# Altium schematic symbol library RK3566_.SCHLIB: 107 symbols (part 2 of 3)
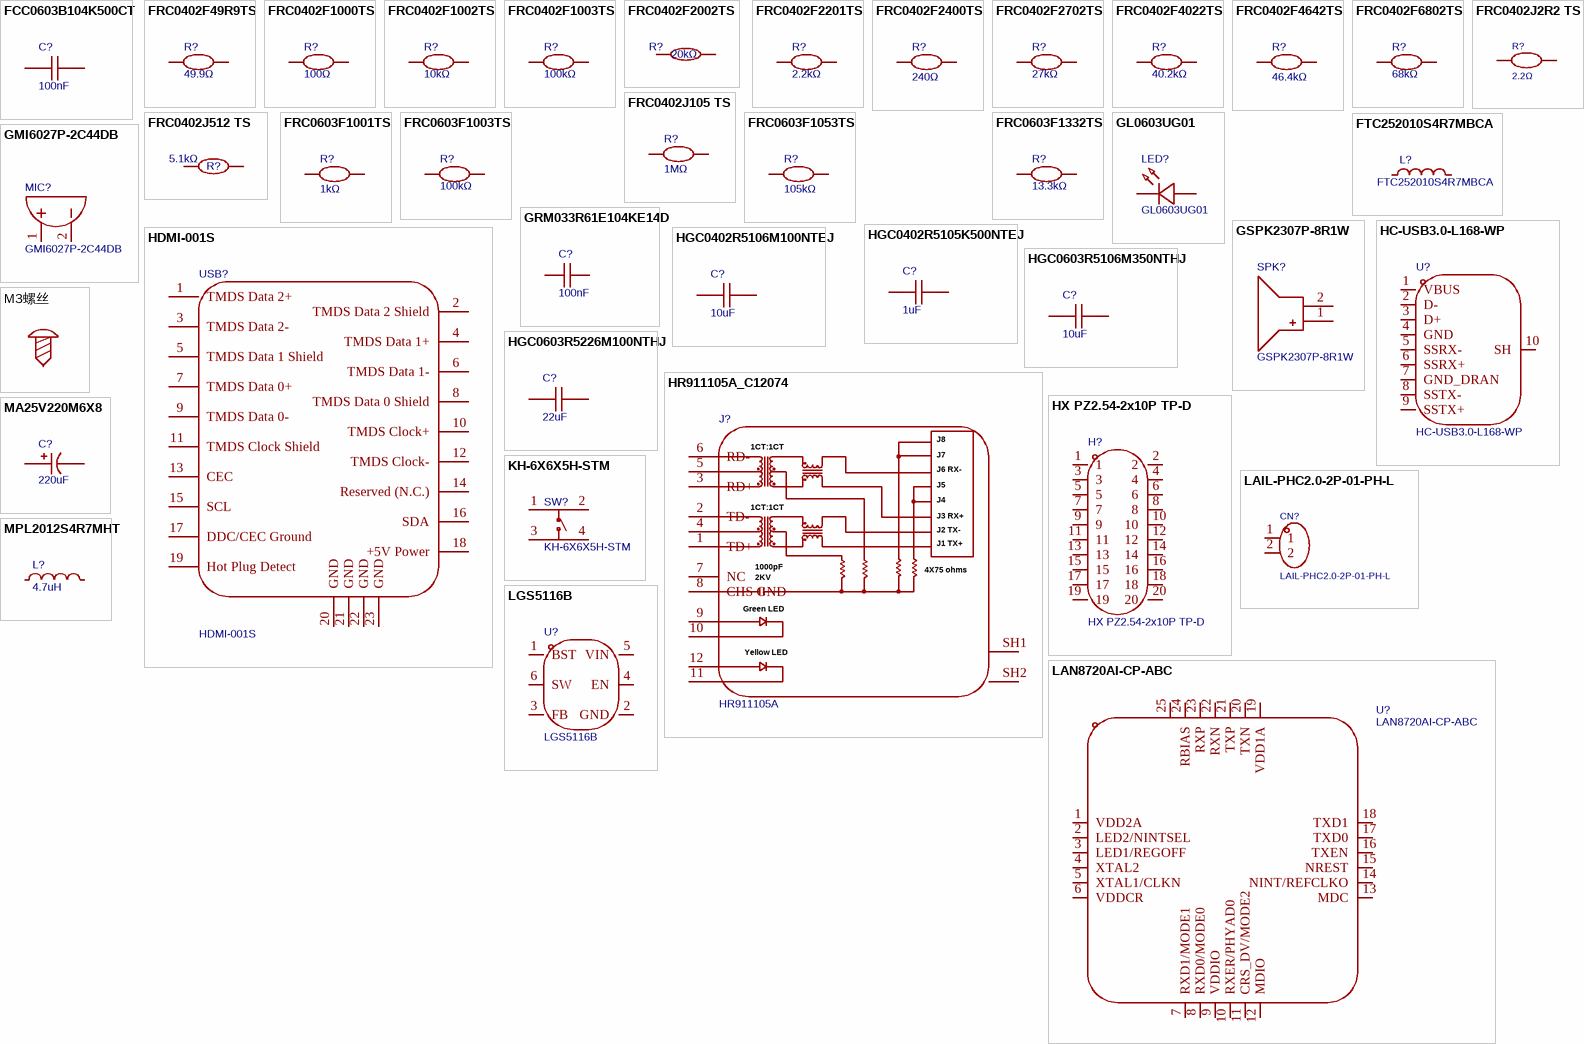
[diagram p5: symbols FCC0603B104K500CT to MPL2012S4R7MHT]

## FTC252010S4R7MBCA
designator L?
小型化一体成型T-CORE，小体积，扁线工艺，感值小; Manufacturer: cjiang(长江微电); AddInBom: yes; ModelId: e143e04106934774881cec608355723f聨0819f05c4eef4c71ace90d822a990e87; ModelName: IND-SMD_L2.5-W2.0-VLS252012CX-150M; ModelTransform: 98.504,78.819,0,0,0,0,-0.004,-0.003,0; Symbol: FTC252010S4R7MBCA; Device: FTC252010S4R7MBCA; LCSC Part Name: 4.7uH ±20% 2.6A; SupplierPart: C5832360; ManufacturerPart: FTC252010S4R7MBCA; Supplier Footprint: 1008; JLCPCB Part Class: Extended Part; Datasheet: https://item.szlcsc.com/datasheet/FTC252010S4R7MBCA/6763480.html; Supplier: LCSC; ConvertToPcb: yes; FootprintName: IND-SMD_L2.5-W2.0-VLS252012CX-150M
footprint IND-SMD_L2.5-W2.0-VLS252012CX-150M
pins: 1, 2

## GL0603UG01
designator LED?
灯头类型:-;发光颜色:翠绿色;正向压降(Vf):2.7V~3.2V;功率:-;测试电流:20mA;波长:510nm~531nm;二极管配置:独立二极管;透镜颜色:无色透明透镜;色温:-;发光强度:173mcd~350mcd;发光角度:120°;载带方式:正贴;工作温度:-40℃~+85℃;; Manufacturer: Guiguang light(桂光光电); AddInBom: yes; ModelId: 1f0d29a91be547639d425604e9b96ebb聨0819f05c4eef4c71ace90d822a990e87; ModelName: LED0603-RD; ModelTransform: 63.7794,32.283,0,0,0,0,0,0,0; Illumination Color: 翠绿色; Test Current: 20mA; Diode Configuration: 独立二极管; Lens Color: 无色透明透镜; Viewing Angle: 120°; Symbol: GL0603UG01; Device: GL0603UG01; LCSC Part Name: 0603 翠绿 高亮; SupplierPart: C51933293; ManufacturerPart: GL0603UG01; Supplier Footprint: 0603; JLCPCB Part Class: Extended Part; Datasheet: https://item.szlcsc.com/datasheet/GL0603UG01/54645989.html; Supplier: LCSC; ConvertToPcb: yes; FootprintName: LED0603-RD; Lamp Holder Type: -; Voltage - Forward(Vf): 2.7V~3.2V; Power(Watts): -; Wavelength - Dominant: 510nm~531nm; Peak Wavelength: -; Color Temperature: -; Luminous Intensity: 173mcd~350mcd; Mounting Style: 正贴; Operating Temperature: -40℃~+85℃
footprint LED0603-RD
pins: 1 K, 2 A

## GMI6027P-2C44DB
designator MIC?
指向性:全指向;输出阻抗:2.2kΩ;信噪比:58dB;灵敏度:-44dB;; Manufacturer: INGHAi(赢海); AddInBom: yes; ModelId: 14beca5542da4211ac0cab0f488bdd66聨0819f05c4eef4c71ace90d822a990e87; ModelName: MIC-TH_BD6.0-P1.90-D0.4-L; ModelTransform: 236.22,236.218,0,0,0,0,0,35.43,-118.11; Voltage - Supply: 2V; Current - Supply: 500uA; Direction: 全指向; Output Impedance: 2.2kΩ; S/N Ratio: 58dB; Sensitivity: -44dB; Frequency Range: 100Hz~10000Hz; Symbol: GMI6027P-2C44DB; Device: GMI6027P-2C44DB; LCSC Part Name: 全指向双电容φ6.0*2.7mm 1.5V-10V 灵敏度-44db 低阻抗 针脚; SupplierPart: C233905; ManufacturerPart: GMI6027P-2C44DB; Supplier Footprint: 插件,D=6mm; JLCPCB Part Class: Extended Part; Datasheet: https://item.szlcsc.com/datasheet/GMI6027P-2C44DB/233687.html; Supplier: LCSC; ConvertToPcb: yes; FootprintName: MIC-TH_BD6.0-P1.90-D0.4-L; Diameter(φD): 6mm; Height: 2.7mm; Operating Temperature: -20℃~+60℃; Mounting Type: 插件; Lead Pitch: -
footprint MIC-TH_BD6.0-P1.90-D0.4-L
pins: 1, 2

## GRM033R61E104KE14D
designator C?, comment 100nF
容值:100nF;精度:±10%;额定电压:25V;温度系数:X5R;; Manufacturer: muRata(村田); Symbol: GRM033R61E104KE14D; AddInBom: yes; ModelId: e8033a7cb35143ffb28e3b81b2577ea0聨0819f05c4eef4c71ace90d822a990e87; ModelName: C0201_L0.6-W0.3-H0.3; ModelTransform: 23.622,11.811,0,0,0,0,0,0,0; Tolerance: ±10%; Voltage Rating: 25V; Temperature Coefficient: X5R; Device: GRM033R61E104KE14D; LCSC Part Name: 100nF ±10% 25V; SupplierPart: C76939; ManufacturerPart: GRM033R61E104KE14D; Supplier Footprint: 0201; JLCPCB Part Class: Extended Part; Datasheet: https://item.szlcsc.com/datasheet/GRM033R61E104KE14D/78066.html; Supplier: LCSC; ConvertToPcb: yes; FootprintName: C0201; Value: 100nF
footprint C0201
pins: 1, 2

## GSPK2307P-8R1W
designator SPK?
构造类型:电磁式;阻抗:8Ω;谐振频率:1.7kHz;失真(THD):5%;额定功率:500mW;声压(SPL):88dB;; Manufacturer: INGHAi(赢海); AddInBom: yes; ModelId: ab55928af2af4572b770ceb6505e1bd0聨0819f05c4eef4c71ace90d822a990e87; ModelName: SPK-TH_BD23.0-P10.00-D0.8-L-RD; ModelTransform: 905.51,905.51,0,0,0,0,0.157,0,-236.22; Impedance: 8Ω; Resonant Frequency: 1.7kHz; Total Harmonic Distortion(THD): 5%; Rated Power: 500mW; Sound Pressure Level(SPL): 88dB; Max Power: 1W; Symbol: GSPK2307P-8R1W; Device: GSPK2307P-8R1W; LCSC Part Name: 23mm 8Ω; SupplierPart: C530531; ManufacturerPart: GSPK2307P-8R1W; Supplier Footprint: -; JLCPCB Part Class: Extended Part; Datasheet: https://item.szlcsc.com/datasheet/GSPK2307P-8R1W/550865.html; Supplier: LCSC; ConvertToPcb: yes; FootprintName: SPK-TH_BD23.0-P10.00-D0.8-L-RD; Technology: 电磁式; Frequency Range: -; Diameter(φD): 23mm; Length: -; Width: -; Height: 6.8mm; Operating Temperature: -40℃~+85℃; Mounting Type: -; Lead Pitch: -
footprint SPK-TH_BD23.0-P10.00-D0.8-L-RD
pins: 1 +, 2 -

## HC-USB3.0-L168-WP
designator U?
连接器类型:Type-A;协议标准:USB 3.0;公母:母;安装方式:弯插;触点数量:9P;端口数量:1;额定电流 - 电源:1.5A;工作温度:-25℃~+70℃;; Manufacturer: HC(虹成电子); AddInBom: yes; ModelId: a6994728bee34198bb5c5e1920a86239聨0819f05c4eef4c71ace90d822a990e87; ModelName: USB-TH_USB3.0-A; ModelTransform: 614.14546,661.41998,0,0,0,0,-0.001,-204.724,-137.795; Connector Type: Type-A; Protocol Standard: USB 3.0; Gender: 母; Number of Contacts: 9P; Number of Ports: 1; Current Rating-Power: 1.5A; Voltage Rating: 30V; Connect-Disconnect Life: 1.5千次; Detection color: 蓝色; Symbol: HC-USB3.0-L168-WP; Device: HC-USB3.0-L168-WP; LCSC Part Name: Type-A 母 弯插 USB3.0 A母90度 弯脚蓝色平口 吸塑盒; SupplierPart: C7501850; ManufacturerPart: HC-USB3.0-L168-WP; Supplier Footprint: 弯插; JLCPCB Part Class: Extended Part; Datasheet: https://item.szlcsc.com/datasheet/HC-USB3.0-L168-WP/8585391.html; Supplier: LCSC; ConvertToPcb: yes; FootprintName: USB-TH_USB3.0-A; Mounting Type: 弯插; Supplementary Features: -; Center Height: -; Length: 16.8mm; Operating Temperature: -25℃~+70℃
footprint USB-TH_USB3.0-A
pins: 1 VBUS, 2 D-, 3 D+, 4 GND, 5 SSRX-, 6 SSRX+, 7 GND_DRAN, 8 SSTX-, 9 SSTX+, 10 SH

## HDMI-001S
designator USB?
19PIN A型前插后贴HDMI插座 铜壳; Manufacturer: XUNPU(讯普); AddInBom: yes; ModelId: 95350f9f774e4f059b8c605506db97f9聨0819f05c4eef4c71ace90d822a990e87; ModelName: HDMI-SMD_HDMI-001S; ModelTransform: 590.5878,468.503,0,0,0,0,0,-79.567,-85.039; Connector Type: HDMI-A; Gender: 母; Symbol: HDMI-001S; Device: HDMI-001S; LCSC Part Name: HDMI-A 母 19P; SupplierPart: C720616; ManufacturerPart: HDMI-001S; Supplier Footprint: SMD; JLCPCB Part Class: Extended Part; Datasheet: https://item.szlcsc.com/datasheet/HDMI-001S/763623.html; Supplier: LCSC; ConvertToPcb: yes; FootprintName: HDMI-SMD_HDMI-001S; Number of Pins: 19P; Mounting Type: 卧贴; Current Rating: -; Voltage Rating: -; Operating Temperature: -
footprint HDMI-SMD_HDMI-001S
pins: 1 TMDS Data 2+, 2 TMDS Data 2 Shield, 3 TMDS Data 2-, 4 TMDS Data 1+, 5 TMDS Data 1 Shield, 6 TMDS Data 1-, 7 TMDS Data 0+, 8 TMDS Data 0 Shield, 9 TMDS Data 0-, 10 TMDS Clock+, 11 TMDS Clock Shield, 12 TMDS Clock-, 13 CEC, 14 Reserved (N.C.), 15 SCL, 16 SDA, 17 DDC/CEC Ground, 18 +5V Power, 19 Hot Plug Detect, 20 GND, 21 GND, 22 GND, 23 GND

## HGC0402R5105K500NTEJ
designator C?, comment 1uF
容值:1uF;精度:±10%;额定电压:50V;温度系数:X5R;; Manufacturer: Chinocera(华瓷); Symbol: HGC0402R5105K500NTEJ; 3D Model: 36a51122f27c49738f86b3bfa98863e0聨0819f05c4eef4c71ace90d822a990e87; 3D Model Transform: 39.37,19.685,0,0,0,0,0,0,0; Tolerance: ±10%; Voltage Rating: 50V; Temperature Coefficient: X5R; AddInBom: yes; ModelName: C0402_L1.0-W0.5-H0.5; Device: HGC0402R5105K500NTEJ; LCSC Part Name: 1uF ±10% 50V; Supplier Part: C7472948; Manufacturer Part: HGC0402R5105K500NTEJ; Supplier Footprint: 0402; JLCPCB Part Class: Extended Part; Datasheet: https://item.szlcsc.com/datasheet/HGC0402R5105K500NTEJ/8532795.html; Supplier: LCSC; Value: 1uF; ConvertToPcb: yes; FootprintName: C0402
footprint C0402
3D model C0402_L1.0-W0.5-H0.5
pins: 1, 2

## HGC0402R5106M100NTEJ
designator C?, comment 10uF
容值:10uF;精度:±20%;额定电压:10V;温度系数:X5R;; Manufacturer: Chinocera(华瓷); Symbol: HGC0402R5106M100NTEJ; 3D Model: 36a51122f27c49738f86b3bfa98863e0聨0819f05c4eef4c71ace90d822a990e87; 3D Model Transform: 39.37,19.685,0,0,0,0,0,0,0; Tolerance: ±20%; Voltage Rating: 10V; Temperature Coefficient: X5R; AddInBom: yes; ModelName: C0402_L1.0-W0.5-H0.5; Device: HGC0402R5106M100NTEJ; LCSC Part Name: 10uF ±20% 10V; Supplier Part: C7472949; Manufacturer Part: HGC0402R5106M100NTEJ; Supplier Footprint: 0402; JLCPCB Part Class: Extended Part; Datasheet: https://item.szlcsc.com/datasheet/HGC0402R5106M100NTEJ/8532796.html; Supplier: LCSC; Value: 10uF; ConvertToPcb: yes; FootprintName: C0402
footprint C0402
3D model C0402_L1.0-W0.5-H0.5
pins: 1, 2

## HGC0603R5106M350NTHJ
designator C?, comment 10uF
容值:10uF;精度:±20%;额定电压:35V;温度系数:X5R;; Manufacturer: Chinocera(华瓷); Symbol: HGC0603R5106M350NTHJ; AddInBom: yes; ModelId: ac125912035d415993ca9572d50418b1聨0819f05c4eef4c71ace90d822a990e87; ModelName: C0603_L1.6-W0.8-H0.8; ModelTransform: 62.992,31.496,0,0,0,0,0,0,0; Tolerance: ±20%; Voltage Rating: 35V; Temperature Coefficient: X5R; Device: HGC0603R5106M350NTHJ; LCSC Part Name: 10uF ±20% 35V; SupplierPart: C22367827; ManufacturerPart: HGC0603R5106M350NTHJ; Supplier Footprint: 0603; JLCPCB Part Class: Extended Part; Datasheet: https://item.szlcsc.com/datasheet/HGC0603R5106M350NTHJ/23841132.html; Supplier: LCSC; ConvertToPcb: yes; FootprintName: C0603; Value: 10uF
footprint C0603
pins: 1, 2

## HGC0603R5226M100NTHJ
designator C?, comment 22uF
容值:22uF;精度:±20%;额定电压:10V;温度系数:X5R;; Manufacturer: Chinocera(华瓷); Symbol: HGC0603R5226M100NTHJ; 3D Model: ac125912035d415993ca9572d50418b1聨0819f05c4eef4c71ace90d822a990e87; 3D Model Transform: 62.992,31.496,0,0,0,0,0,0,0; Tolerance: ±20%; Voltage Rating: 10V; Temperature Coefficient: X5R; AddInBom: yes; ModelName: C0603_L1.6-W0.8-H0.8; Device: HGC0603R5226M100NTHJ; LCSC Part Name: 22uF ±20% 10V; Supplier Part: C7432770; Manufacturer Part: HGC0603R5226M100NTHJ; Supplier Footprint: 0603; JLCPCB Part Class: Extended Part; Datasheet: https://item.szlcsc.com/datasheet/HGC0603R5226M100NTHJ/8438252.html; Supplier: LCSC; Value: 22uF; ConvertToPcb: yes; FootprintName: C0603
footprint C0603
3D model C0603_L1.6-W0.8-H0.8
pins: 1, 2

## HR911105A_C12074
designator J?, comment HR911105A
连接器类型:RJ45插座;安装方式:弯插;端口数量:1;LED:带LED;屏蔽:有屏蔽;等级:-;触头材质:磷青铜;触头镀层:金;工作温度:0℃~+70℃;; Manufacturer: HANRUN(汉仁); Symbol: HR911105A_C12074; AddInBom: yes; ModelId: 269ece015cf14129b359f9a66aa2dc0d聨0819f05c4eef4c71ace90d822a990e87; ModelName: RJ45-TH_HR911105A; ModelTransform: 624.711,850.392,0,0,0,0,0,-89.567,-129.921; Connector Type: RJ45插座; Number of Ports: 1; LED: 带LED; Shielding: 有屏蔽; PoE: 不带PoE; Supplementary Features: 带滤波; Device: HR911105A_C12074; LCSC Part Name: 弯插 带LED; SupplierPart: C12074; ManufacturerPart: HR911105A; Supplier Footprint: 插件; JLCPCB Part Class: Extended Part; Datasheet: https://item.szlcsc.com/datasheet/HR911105A/12651.html; Supplier: LCSC; ConvertToPcb: yes; FootprintName: RJ45-TH_HR911105A; Mounting Type: 弯插; Ratings: -; Contact Material: 磷青铜; Contact Plating: 金; Operating Temperature: 0℃~+70℃; Length: 21.3mm; Width: 16.04mm; Height: 13.5mm
footprint RJ45-TH_HR911105A
pins: 1 TD+, 2 TD-, 3 RD+, 4, 5, 6 RD-, 7 NC, 8 CHS GND, 9, 10, 11, 12, SH1, SH2
text: J8; 1CT:1CT; J7; J6 RX-; J5; J4; J3 RX+; J2 TX-; J1 TX+; 1000pF; 4X75 ohms; 2KV; Green LED; Yellow LED

## HX PZ2.54-2x10P TP-D
designator H?
插针结构:2x10P;间距:2.54mm;行距:2.54mm;圆针/方针:方针;安装方式:立贴;排数:双排;总PIN位数:20P;额定电流:3A;额定电压:1kV;配合针长度:6mm;塑高:2.5mm;端接针长度:-;触头材质:黄铜;触头镀层:金;工作温度:-40℃~+105℃;颜色:黑色;; Manufacturer: hanxia(韩下); AddInBom: yes; ModelId: 2f2e403eed2245bd8cccf105df6707d7聨0819f05c4eef4c71ace90d822a990e87; ModelName: HDR-SMD_20P-P2.54-V-M-R2-C10-S2.54-LS7.5-EH; ModelTransform: 1000.39166,295.275,0,0,0,0,0,0,-27.559; Pin Structure: 2x10P; Pitch: 2.54mm; Circluar Pins/Square Pins: 方针; Current Rating: 3A; Voltage Rating (Max): 1kV; Symbol: HX PZ2.54-2X10P TP-D; Device: HX PZ2.54-2x10P TP-D; LCSC Part Name: 配套排母HX PM2.54-2x10P系列 2x10P 间距:2.54mm 方针 立贴; SupplierPart: C46061674; ManufacturerPart: HX PZ2.54-2x10P TP-D; Supplier Footprint: SMD,P=2.54mm; JLCPCB Part Class: Extended Part; Datasheet: https://item.szlcsc.com/datasheet/HX%2520PZ2.54-2x10P%2520TP-D/48170534.html; Supplier: LCSC; ConvertToPcb: yes; FootprintName: HDR-SMD_20P-P2.54-V-M-R2-C10-S2.54-LS7.5-EH; Row Spacing: 2.54mm; Mounting Type: 立贴; Number of Rows: 双排; Number of Pins: 20P; Length of Mating Pin: 6mm; Insulation Height: 2.5mm; Length of End Connection Pin: -; Contact Material: 黄铜; Contact Plating: 金; Operating Temperature: -40℃~+105℃; Color: 黑色; Supplementary Features: -
footprint HDR-SMD_20P-P2.54-V-M-R2-C10-S2.54-LS7.5-EH
pins: 1, 2, 3, 4, 5, 6, 7, 8, 9, 10, 11, 12, 13, 14, 15, 16, 17, 18, 19, 20

## KH-6X6X5H-STM
designator SW?
电路结构:单刀单掷;按钮形状:圆形按钮;安装方式:立贴;开关长度:6mm;开关宽度:6mm;开关高度:5mm;带支架:不带支架;触点电流:50mA;额定电压:12V;工作寿命:8万次;; Manufacturer: kinghelm(金航标); AddInBom: yes; ModelId: 46371efb35684031937580a0045530ec聨0819f05c4eef4c71ace90d822a990e87; ModelName: SW-SMD_4P-L6.0-W6.0-P4.50-LS9.0_H5.0; ModelTransform: 354.33,236.25937,0,0,0,0,0,0,0; Circuit: 单刀单掷; Actuator Style: 圆形按钮; Switch Height: 5mm; with Bracket: 不带支架; Contact Current: 50mA; Voltage Rating: 12V; Actuator/Cap Color: 黑色; Life: 8万次; Symbol: KH-6X6X5H-STM; Device: KH-6X6X5H-STM; LCSC Part Name: 6*6*5mm 立贴 轻触开关; SupplierPart: C2837531; ManufacturerPart: KH-6X6X5H-STM; Supplier Footprint: SMD-4P,6x6mm; JLCPCB Part Class: Extended Part; Datasheet: https://item.szlcsc.com/datasheet/KH-6X6X5H-STM/3009601.html; Supplier: LCSC; ConvertToPcb: yes; FootprintName: SW-SMD_4P-L6.0-W6.0-P4.50-LS9.0_H5.0; Mounting Type: 立贴; Length: 6mm; Width: 6mm; Termination Style: 鸥翼型
footprint SW-SMD_4P-L6.0-W6.0-P4.50-LS9.0_H5.0
pins: 1, 2, 3, 4

## LAIL-PHC2.0-2P-01-PH-L
designator CN?
插针结构:1x2P;间距:2mm;安装方式:直插;参考系列:PH;总PIN数:2P;排数:1;每排PIN数:2;额定电流:2A;触头材质:黄铜;触头镀层:锡;工作温度:-25℃~+85℃;; Manufacturer: LAILAN(莱联); AddInBom: yes; ModelId: 5b53f0660d4141229bca89eb4238f4a6聨0819f05c4eef4c71ace90d822a990e87; ModelName: CONN-TH_2P-P2.00_HC-PH-2A-TW; ModelTransform: 236.22,189.3697,0,180,0,0,0,25.591,-133.858; Pins Structure: 1x2P; Pitch: 2mm; Reference Series: PH; Number of PINs Per Row: 2; Current Rating: 2A; Voltage Rating: 250V; Plastic Material: PA66; Flame Retardant Rating: UL94V-0; Z-Height of the Board: 6mm; Y-Width of Bottom Edge on Board: 4.7mm; Symbol: LAIL-PHC2.0-2P-01-PH-L; Device: LAIL-PHC2.0-2P-01-PH-L; LCSC Part Name: 1x2P 间距:2mm 直插 系列:PH; SupplierPart: C54905988; ManufacturerPart: LAIL-PHC2.0-2P-01-PH-L; Supplier Footprint: 插件,P=2mm; JLCPCB Part Class: Extended Part; Datasheet: https://item.szlcsc.com/datasheet/LAIL-PHC2.0-2P-01-PH-L/58431115.html; Supplier: LCSC; ConvertToPcb: yes; FootprintName: CONN-TH_2P-P2.00_HC-PH-2A-TW; Mounting Type: 直插; Number of Pins: 2P; Number of Rows: 1; Contact Material: 黄铜; Contact Plating: 锡; Operating Temperature: -25℃~+85℃; Color: 白色; X-Length of Bottom Edge on Board (Spacing Line): 6mm
footprint CONN-TH_2P-P2.00_HC-PH-2A-TW
pins: 1, 2

## LAN8720AI-CP-ABC
designator U?
输入类型:施密特触发器;工作电压:1.6V~3.6V;元件数:-;每个元件位数:-;灌电流(IOL):12mA;拉电流(IOH):12mA;; Manufacturer: MICROCHIP(美国微芯); AddInBom: yes; ModelId: 1e6a51e223ba431598528b34e5bdfcc9聨0819f05c4eef4c71ace90d822a990e87; ModelName: QFN-24_L4.0-W4.0-H0.9-P0.50; ModelTransform: 157.48,157.48,0,90,0,0,0,0,0; Input type: 施密特触发器; Current - Output Low(IOL): 12mA; Symbol: LAN8720AI-CP-ABC; Device: LAN8720AI-CP-ABC; LCSC Part Name: 支持HP自动MDIX功能的小尺寸RMII 10/100以太网收发器; SupplierPart: C511283; ManufacturerPart: LAN8720AI-CP-ABC; Supplier Footprint: QFN-24-EP(4x4); JLCPCB Part Class: Extended Part; Datasheet: https://item.szlcsc.com/datasheet/LAN8720AI-CP-ABC/525730.html; Supplier: LCSC; ConvertToPcb: yes; FootprintName: QFN-24_L4.0-W4.0-P0.50-BL-EP2.6; output type: -; Voltage - Supply: 1.6V~3.6V; Number of Elements: -; Number of Bits per Element: -; Channel Type: -; Current - Output High(IOH): 12mA; Logic Family: LAN8720A; Operating Temperature: -40℃~+85℃; Quiescent Current: -; Propagation Delay: -; Features: -
footprint QFN-24_L4.0-W4.0-P0.50-BL-EP2.6
pins: 1 VDD2A, 2 LED2/NINTSEL, 3 LED1/REGOFF, 4 XTAL2, 5 XTAL1/CLKN, 6 VDDCR, 7 RXD1/MODE1, 8 RXD0/MODE0, 9 VDDIO, 10 RXER/PHYAD0, 11 CRS_DV/MODE2, 12 MDIO, 13 MDC, 14 NINT/REFCLKO, 15 NREST, 16 TXEN, 17 TXD0, 18 TXD1, 19 VDD1A, 20 TXN, 21 TXP, 22 RXN, 23 RXP, 24 RBIAS, 25 PAD

## LGS5116B
designator U?
功能类型:降压型;工作电压:4.5V~18V;输出电压:600mV~12V;输出电流:2A;输出类型:可调;; Manufacturer: Legend-Si(棱晶半导体); AddInBom: yes; ModelId: 18da8f6c14a34920b3e136b5c401a119聨0819f05c4eef4c71ace90d822a990e87; ModelName: SOT-23-6_L2.9-W1.6-H1.5-LS2.8-P0.95; ModelTransform: 110.73671,114.173,0,180,0,0,0.001,-0.003,0; Function: 降压型; Output Current: 2A; Frequency - Switching: 500kHz; Synchronous Rectifier: 是; Number of Outputs: 1; Topology: 降压式; Quiescent Current: 400uA; Switch tube (built-in/external): 内置; Output Type: 可调; Symbol: LGS5116B; Device: LGS5116B; LCSC Part Name: 降压型 2A 4.5V~18V; SupplierPart: C5818961; ManufacturerPart: LGS5116B; Supplier Footprint: SOT23-6; JLCPCB Part Class: Extended Part; Datasheet: https://item.szlcsc.com/datasheet/LGS5116B/6748671.html; Supplier: LCSC; ConvertToPcb: yes; FootprintName: SOT-23-6_L2.9-W1.6-P0.95-LS2.8-BR; Voltage - Supply: 4.5V~18V; Output Voltage: 600mV~12V; Operating Temperature: -40℃~+125℃@(TJ); Features: 轻载高效模式；逐波限流；过流保护
footprint SOT-23-6_L2.9-W1.6-P0.95-LS2.8-BR
pins: 1 BST, 2 GND, 3 FB, 4 EN, 5 VIN, 6 SW

## M3螺丝
designator SCREW?
Symbol: 螺丝孔; Device: M3螺丝; ConvertToPcb: yes; AddInBom: yes; Supplier Footprint: 插件; FootprintName: M3螺丝
footprint M3螺丝
pins: 1

## MA25V220M6X8
designator C?, comment 220uF
容值:220uF;精度:±20%;额定电压:25V;纹波电流:2.9A@100kHz;等效串联电阻(ESR):28mΩ@100kHz;类型:聚合物;; Manufacturer: JIERR(捷而瑞); Symbol: MA25V220M6X8; AddInBom: yes; ModelId: 697a8c63e3274188b68c96045bc3ea1c聨0819f05c4eef4c71ace90d822a990e87; ModelName: CAP-SMD_BD6.3-L6.6-W6.6-LS7.3-FD; ModelTransform: 287.401,259.842,0,180,0,0,0.001,0.001,0; Tolerance: ±20%; Voltage Rating: 25V; Type: 聚合物; Lifetime: 2000hrs@105℃; Polarity type: 有极性; Device: MA25V220M6X8; LCSC Part Name: 220uF ±20% 25V; SupplierPart: C46550464; ManufacturerPart: MA25V220M6X8; Supplier Footprint: SMD,D6.3xL7.7mm; JLCPCB Part Class: Extended Part; Datasheet: https://item.szlcsc.com/datasheet/MA25V220M6X8/48680158.html; Supplier: LCSC; ConvertToPcb: yes; FootprintName: CAP-SMD_BD6.3-L6.6-W6.6-LS7.3-FD; Value: 220uF; Ripple Current: 2.9A@100kHz; Equivalent Series Resistance(ESR): 28mΩ@100kHz; Diameter: 6.3mm; Height - Seated (Max): 7.7mm; Operating Temperature: -55℃~+105℃
footprint CAP-SMD_BD6.3-L6.6-W6.6-LS7.3-FD
pins: 1, 2

## MPL2012S4R7MHT
designator L?, comment 4.7uH
电感值:4.7uH;精度:±20%;额定电流:800mA;类型:叠层电感;; Manufacturer: Sunlord(顺络); Symbol: MPL2012S4R7MHT; AddInBom: yes; ModelId: 37a81e68749a4138bd2dfa6897b24b85聨0819f05c4eef4c71ace90d822a990e87; ModelName: R0805_L2.0-W1.3-H0.6; ModelTransform: 78.74,51.181,0,0,0,0,0,0.001,0; Tolerance: ±20%; Current Rating: 800mA; DC Resistance(DCR): 250mΩ; Type: 叠层电感; Device: MPL2012S4R7MHT; LCSC Part Name: 4.7uH ±20%; SupplierPart: C63166; ManufacturerPart: MPL2012S4R7MHT; Supplier Footprint: 0805; JLCPCB Part Class: Extended Part; Datasheet: https://item.szlcsc.com/datasheet/MPL2012S4R7MHT/64229.html; Supplier: LCSC; ConvertToPcb: yes; FootprintName: L0805; Value: 4.7uH
footprint L0805
pins: 1, 2

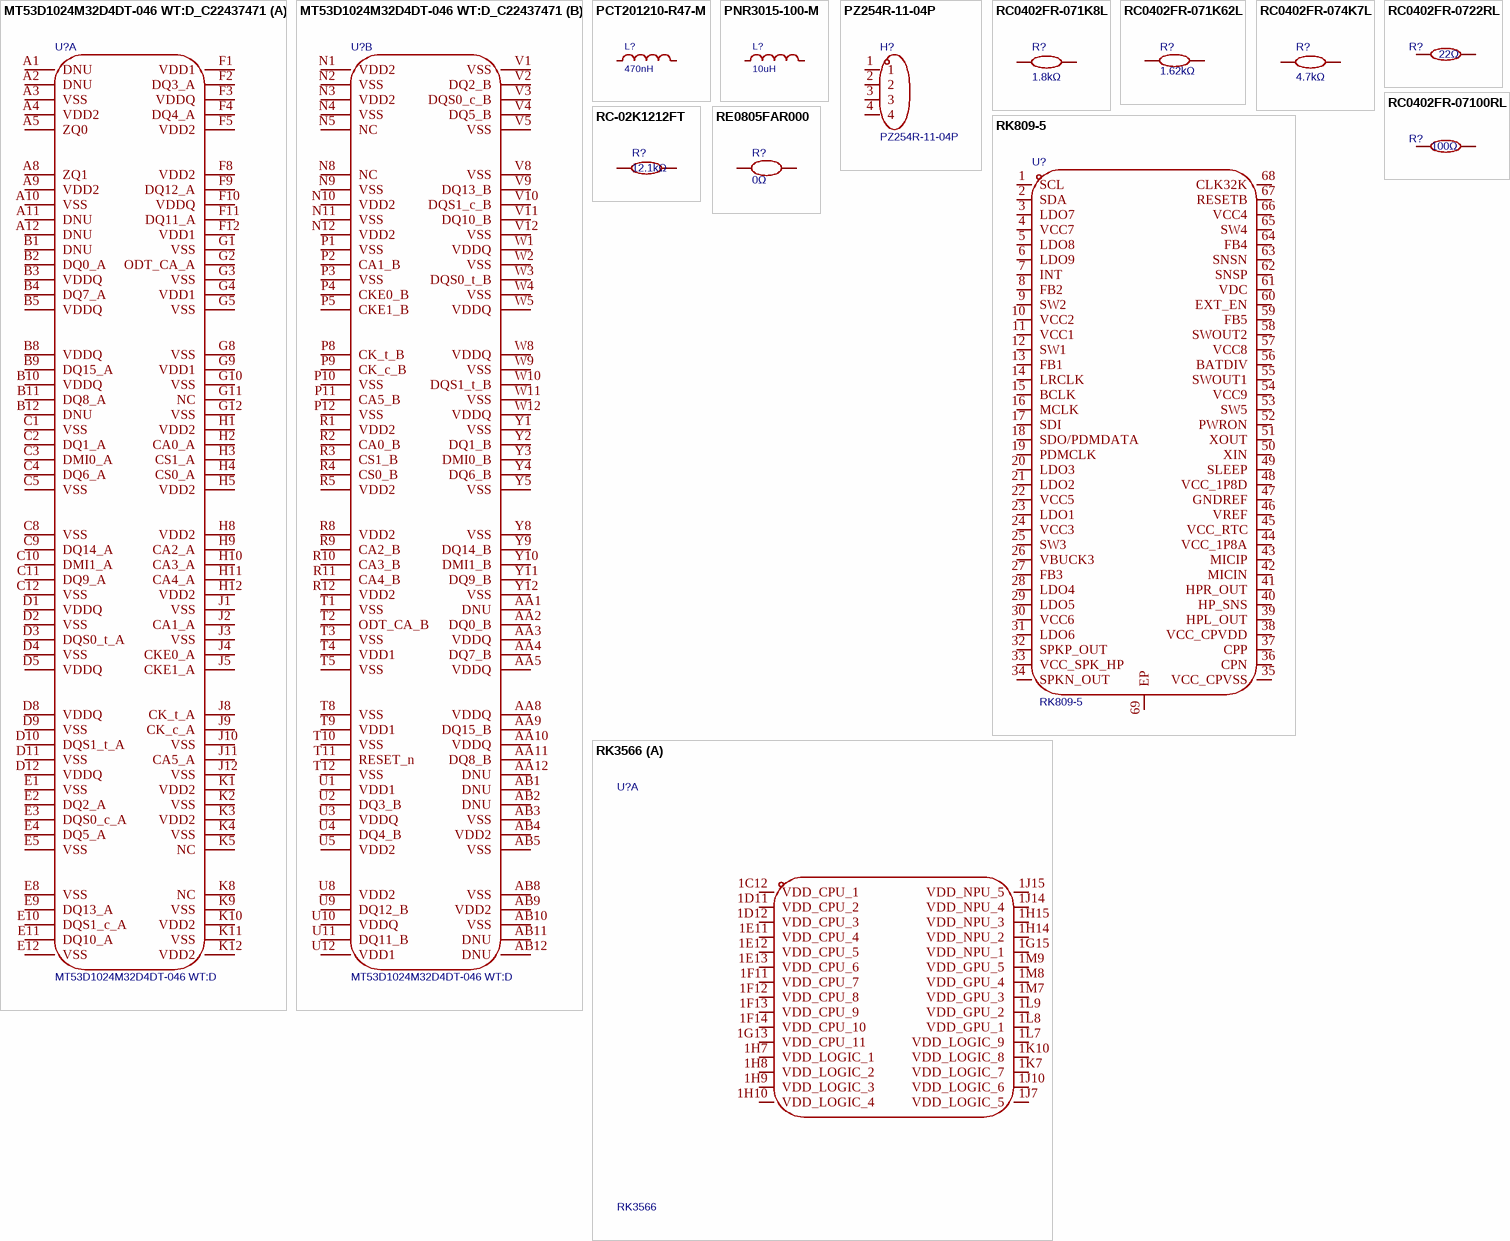
[diagram p2: symbols MT53D1024M32D4DT-046 WT:D_C22437471 to RK3566]

## MT53D1024M32D4DT-046 WT:D_C22437471
designator U?, comment MT53D1024M32D4DT-046 WT:D
存储器构架(格式):LPDDR4 SDRAM;时钟频率(fc):2.133GHz;存储容量:32Gbit;; Manufacturer: micron(美光); Symbol: MT53D1024M32D4DT-046 WT:D_C22437471; Relevance: []; AddInBom: yes; Memory Size: 32Gbit; Voltage - Supply: 1.1V; Device: MT53D1024M32D4DT-046 WT:D_C22437471; LCSC Part Name: X32 LPDDR4/LPDDR4X SDRAM; SupplierPart: C22437471; ManufacturerPart: MT53D1024M32D4DT-046 WT:D; Supplier Footprint: VFBGA-200(10x14.5); JLCPCB Part Class: Extended Part; Datasheet: https://item.szlcsc.com/datasheet/MT53D1024M32D4DT-046%2520WT%253AD/24072754.html; Supplier: LCSC; ConvertToPcb: yes; FootprintName: VFBGA-200_L14.5-W10.0-BL_MT53D1024M32D4DT; Memory Format: LPDDR4 SDRAM; Clock Frequency: 2.133GHz; Current - Supply: -; Refresh Current: -; Operating Temperature: -30℃~+85℃; Features: 写入均衡功能；自动自刷新；内置温度传感器；自动预充电功能；ZQ校准功能
footprint VFBGA-200_L14.5-W10.0-BL_MT53D1024M32D4DT
part A pins: A1 DNU, A2 DNU, A3 VSS, A4 VDD2, A5 ZQ0, A8 ZQ1, A9 VDD2, A10 VSS, A11 DNU, A12 DNU, B1 DNU, B2 DQ0_A, B3 VDDQ, B4 DQ7_A, B5 VDDQ, B8 VDDQ, B9 DQ15_A, B10 VDDQ, B11 DQ8_A, B12 DNU, C1 VSS, C2 DQ1_A, C3 DMI0_A, C4 DQ6_A, C5 VSS, C8 VSS, C9 DQ14_A, C10 DMI1_A, C11 DQ9_A, C12 VSS, D1 VDDQ, D2 VSS, D3 DQS0_t_A, D4 VSS, D5 VDDQ, D8 VDDQ, D9 VSS, D10 DQS1_t_A, D11 VSS, D12 VDDQ, E1 VSS, E2 DQ2_A, E3 DQS0_c_A, E4 DQ5_A, E5 VSS, E8 VSS, E9 DQ13_A, E10 DQS1_c_A, E11 DQ10_A, E12 VSS, F1 VDD1, F2 DQ3_A, F3 VDDQ, F4 DQ4_A, F5 VDD2, F8 VDD2, F9 DQ12_A, F10 VDDQ, F11 DQ11_A, F12 VDD1, G1 VSS, G2 ODT_CA_A, G3 VSS, G4 VDD1, G5 VSS, G8 VSS, G9 VDD1, G10 VSS, G11 NC, G12 VSS, H1 VDD2, H2 CA0_A, H3 CS1_A, H4 CS0_A, H5 VDD2, H8 VDD2, H9 CA2_A, H10 CA3_A, H11 CA4_A, H12 VDD2, J1 VSS, J2 CA1_A, J3 VSS, J4 CKE0_A, J5 CKE1_A, J8 CK_t_A, J9 CK_c_A, J10 VSS, J11 CA5_A, J12 VSS, K1 VDD2, K2 VSS, K3 VDD2, K4 VSS, K5 NC, K8 NC, K9 VSS, K10 VDD2, K11 VSS, K12 VDD2
part B pins: AA1 DNU, AA2 DQ0_B, AA3 VDDQ, AA4 DQ7_B, AA5 VDDQ, AA8 VDDQ, AA9 DQ15_B, AA10 VDDQ, AA11 DQ8_B, AA12 DNU, AB1 DNU, AB2 DNU, AB3 VSS, AB4 VDD2, AB5 VSS, AB8 VSS, AB9 VDD2, AB10 VSS, AB11 DNU, AB12 DNU, N1 VDD2, N2 VSS, N3 VDD2, N4 VSS, N5 NC, N8 NC, N9 VSS, N10 VDD2, N11 VSS, N12 VDD2, P1 VSS, P2 CA1_B, P3 VSS, P4 CKE0_B, P5 CKE1_B, P8 CK_t_B, P9 CK_c_B, P10 VSS, P11 CA5_B, P12 VSS, R1 VDD2, R2 CA0_B, R3 CS1_B, R4 CS0_B, R5 VDD2, R8 VDD2, R9 CA2_B, R10 CA3_B, R11 CA4_B, R12 VDD2, T1 VSS, T2 ODT_CA_B, T3 VSS, T4 VDD1, T5 VSS, T8 VSS, T9 VDD1, T10 VSS, T11 RESET_n, T12 VSS, U1 VDD1, U2 DQ3_B, U3 VDDQ, U4 DQ4_B, U5 VDD2, U8 VDD2, U9 DQ12_B, U10 VDDQ, U11 DQ11_B, U12 VDD1, V1 VSS, V2 DQ2_B, V3 DQS0_c_B, V4 DQ5_B, V5 VSS, V8 VSS, V9 DQ13_B, V10 DQS1_c_B, V11 DQ10_B, V12 VSS, W1 VDDQ, W2 VSS, W3 DQS0_t_B, W4 VSS, W5 VDDQ, W8 VDDQ, W9 VSS, W10 DQS1_t_B, W11 VSS, W12 VDDQ, Y1 VSS, Y2 DQ1_B, Y3 DMI0_B, Y4 DQ6_B, Y5 VSS, Y8 VSS, Y9 DQ14_B, Y10 DMI1_B, Y11 DQ9_B, Y12 VSS

## PCT201210-R47-M
designator L?, comment 470nH
小型化一体成型T-CORE，小体积，扁线工艺，感值小; Manufacturer: JIERR(捷而瑞); Symbol: PCT201210-R47-M; AddInBom: yes; Tolerance: ±20%; Current Rating: 3.8A; Current - Saturation(Isat): 4.7A; DC Resistance(DCR): 35mΩ; Type: 一体成型电感; Device: PCT201210-R47-M; LCSC Part Name: 0.47μH ±20% 4.7A; SupplierPart: C54557068; ManufacturerPart: PCT201210-R47-M; Supplier Footprint: 0805; JLCPCB Part Class: Extended Part; Datasheet: https://item.szlcsc.com/datasheet/PCT201210-R47-M/57921656.html; Supplier: LCSC; ConvertToPcb: yes; FootprintName: IND-SMD_L2.0-W1.2_PCT201210; Value: 470nH
footprint IND-SMD_L2.0-W1.2_PCT201210
pins: 1, 2

## PNR3015-100-M
designator L?, comment 10uH
电感值:10uH;精度:±20%;额定电流:900mA;饱和电流(Isat):920mA;类型:磁胶屏蔽电感;; Manufacturer: JIERR(捷而瑞); Symbol: PNR3015-100-M; AddInBom: yes; ModelId: 383ff80ba23841c7ae1294cf4d0706db聨0819f05c4eef4c71ace90d822a990e87; ModelName: IND-SMD_L3.0-W3.0_MAI3015S; ModelTransform: 118.11,118.11394,0,0,0,0,-0.005,0,0; Tolerance: ±20%; Current Rating: 900mA; Current - Saturation(Isat): 920mA; DC Resistance(DCR): 250mΩ; Type: 磁胶屏蔽电感; Device: PNR3015-100-M; LCSC Part Name: 10uH±20% 0.92A; SupplierPart: C55381747; ManufacturerPart: PNR3015-100-M; Supplier Footprint: SMD,3x3mm; JLCPCB Part Class: Extended Part; Datasheet: https://item.szlcsc.com/datasheet/PNR3015-100-M/59339375.html; Supplier: LCSC; ConvertToPcb: yes; FootprintName: IND-SMD_L3.0-W3.0_MAI3015S; Value: 10uH
footprint IND-SMD_L3.0-W3.0_MAI3015S
pins: 1, 2

## PZ254R-11-04P
designator H?
插针结构:1x4P;间距:2.54mm;行距:-;圆针/方针:方针;安装方式:弯插;排数:单排;总PIN位数:4P;额定电流:3A;额定电压:250V;配合针长度:6mm;塑高:2.5mm;端接针长度:-;触头材质:黄铜;触头镀层:-;工作温度:-40℃~+105℃;颜色:黑色;; Manufacturer: XFCN(兴飞); AddInBom: yes; ModelId: d6c429cf28314298a2074cefd68172f0聨0819f05c4eef4c71ace90d822a990e87; ModelName: HDR-TH_4P-P2.54-M-WI-1X4P; ModelTransform: 399.999,417.322,0,180,0,0,0,-196.85,-118.11; Pin Structure: 1x4P; Pitch: 2.54mm; Circluar Pins/Square Pins: 方针; Current Rating: 3A; Voltage Rating (Max): 250V; Symbol: PZ254R-11-04P; Device: PZ254R-11-04P; LCSC Part Name: 1x4P 间距:2.54mm 方针 弯插; SupplierPart: C492412; ManufacturerPart: PZ254R-11-04P; Supplier Footprint: 弯插,P=2.54mm; JLCPCB Part Class: Extended Part; Datasheet: https://item.szlcsc.com/datasheet/PZ254R-11-04P/502968.html; Supplier: LCSC; ConvertToPcb: yes; FootprintName: HDR-TH_4P-P2.54-H-M-W10.4; Row Spacing: -; Mounting Type: 弯插; Number of Rows: 单排; Number of Pins: 4P; Length of Mating Pin: 6mm; Insulation Height: 2.5mm; Length of End Connection Pin: -; Contact Material: 黄铜; Contact Plating: -; Operating Temperature: -40℃~+105℃; Color: 黑色
footprint HDR-TH_4P-P2.54-H-M-W10.4
pins: 1, 2, 3, 4

## RC0402FR-071K8L
designator R?, comment 1.8kΩ
电阻类型:厚膜电阻;阻值:1.8kΩ;精度:±1%;功率:62.5mW;温度系数:±100ppm/℃;最大工作电压:50V;工作温度范围:-55℃~+155℃;; Manufacturer: YAGEO(国巨); Symbol: RC0402FR-071K8L; 3D Model: 671aefced39d4c318694bba8bd8efd39; 3D Model Transform: 39.37,19.685,0,0,0,0,0,0.0005,0; Tolerance: ±1%; Power(Watts): 62.5mW; Overload Voltage (Max): 50V; AddInBom: yes; ModelName: R0402_L1.0-W0.5-H0.5; Device: RC0402FR-071K8L; LCSC Part Name: 1.8kΩ ±1% 62.5mW; Supplier Part: C163481; Manufacturer Part: RC0402FR-071K8L; Supplier Footprint: 0402; JLCPCB Part Class: Extended Part; Datasheet: https://atta.szlcsc.com/upload/public/pdf/source/20180111/C163481_15156544709981259002.pdf; Supplier: LCSC; Type: 厚膜电阻; Value: 1.8kΩ; Temperature Coefficient: ±100ppm/℃; Operating Temperature Range: -55℃~+155℃; ConvertToPcb: yes; FootprintName: R0402
footprint R0402
3D model R0402_L1.0-W0.5-H0.5
pins: 1, 2

## RC0402FR-071K62L
designator R?, comment 1.62kΩ
最大工作电压:50V;工作温度范围:-55℃~+155℃;电阻长:-;精度:±1%;电阻直径:-;电阻高:-;电阻宽:-;电阻类型:厚膜电阻;功率:62.5mW;温度系数:±100ppm/℃;阻值:1.62kΩ;; Manufacturer: YAGEO(国巨); Symbol: RC-02W1621FT; Device: RC0402FR-071K62L; 3D Model: 671aefced39d4c318694bba8bd8efd39; 3D Model Transform: 39.37,19.685,0,0,0,0,0,0.0005,0; Overload Voltage (Max): 50V; Tolerance: ±1%; Power(Watts): 62.5mW; AddInBom: yes; ModelName: R0402_L1.0-W0.5-H0.5; Datasheet: https://atta.szlcsc.com/upload/public/pdf/source/20181114/C321323_9504FB1C8D32FD153B2A6FEF9347E3A6.pdf; LCSC Part Name: 1.62kΩ ±1%; Supplier Part: C138038; Manufacturer Part: RC0402FR-071K62L; Supplier Footprint: 0402; JLCPCB Part Class: Extended Part; Supplier: LCSC; Operating Temperature Range: -55℃~+155℃; Body Length: -; φD: -; Body Height: -; Body Width: -; Type: 厚膜电阻; Temperature Coefficient: ±100ppm/℃; Value: 1.62kΩ; ConvertToPcb: yes; FootprintName: R0402
footprint R0402
3D model R0402_L1.0-W0.5-H0.5
pins: 1, 2

## RC0402FR-074K7L
designator R?, comment 4.7kΩ
电阻类型:厚膜电阻;阻值:4.7kΩ;精度:±1%;功率:62.5mW;工作电压:50V;温度系数:±100ppm/℃;; Manufacturer: YAGEO(国巨); Symbol: RC0402FR-074K7L; AddInBom: yes; ModelId: 98c88bc2b9094f218f3a3e30a7012738聨0819f05c4eef4c71ace90d822a990e87; ModelName: R0402_L1.0-W0.5-H0.4; ModelTransform: 39.37,19.685,0,0,0,0,0,0,0; Tolerance: ±1%; Power(Watts): 62.5mW; Voltage-Supply(Max): 50V; Device: RC0402FR-074K7L; LCSC Part Name: 厚膜电阻 4.7kΩ ±1% 62.5mW; SupplierPart: C105871; ManufacturerPart: RC0402FR-074K7L; Supplier Footprint: 0402; JLCPCB Part Class: Extended Part; Datasheet: https://item.szlcsc.com/datasheet/RC0402FR-074K7L/107086.html; Supplier: LCSC; ConvertToPcb: yes; FootprintName: R0402; Type: 厚膜电阻; Value: 4.7kΩ; Temperature Coefficient: ±100ppm/℃; Operating Temperature: -55℃~+155℃
footprint R0402
pins: 1, 2

## RC0402FR-0722RL
designator R?, comment 22Ω
电阻类型:厚膜电阻;阻值:22Ω;精度:±1%;功率:62.5mW;工作电压:50V;温度系数:±100ppm/℃;; Manufacturer: YAGEO(国巨); Symbol: RC0402FR-0722RL; 3D Model: 98c88bc2b9094f218f3a3e30a7012738聨0819f05c4eef4c71ace90d822a990e87; 3D Model Transform: 39.37,19.685,0,0,0,0,0,0,0; Tolerance: ±1%; Power(Watts): 62.5mW; Voltage-Supply(Max): 50V; AddInBom: yes; ModelName: R0402_L1.0-W0.5-H0.4; Device: RC0402FR-0722RL; LCSC Part Name: 厚膜电阻 22Ω ±1% 62.5mW; Supplier Part: C114765; Manufacturer Part: RC0402FR-0722RL; Supplier Footprint: 0402; JLCPCB Part Class: Extended Part; Datasheet: https://item.szlcsc.com/datasheet/RC0402FR-0722RL/116009.html; Supplier: LCSC; Type: 厚膜电阻; Value: 22Ω; Temperature Coefficient: ±100ppm/℃; Operating Temperature: -55℃~+155℃; ConvertToPcb: yes; FootprintName: R0402
footprint R0402
3D model R0402_L1.0-W0.5-H0.4
pins: 1, 2

## RC0402FR-07100RL
designator R?, comment 100Ω
电阻类型:厚膜电阻;阻值:100Ω;精度:±1%;功率:62.5mW;工作电压:50V;温度系数:±100ppm/℃;; Manufacturer: YAGEO(国巨); Symbol: RC0402FR-07100RL; AddInBom: yes; ModelId: 98c88bc2b9094f218f3a3e30a7012738聨0819f05c4eef4c71ace90d822a990e87; ModelName: R0402_L1.0-W0.5-H0.4; ModelTransform: 39.37,19.685,0,0,0,0,0,0,0; Tolerance: ±1%; Power(Watts): 62.5mW; Voltage-Supply(Max): 50V; Device: RC0402FR-07100RL; LCSC Part Name: 厚膜电阻 100Ω ±1% 62.5mW; SupplierPart: C106232; ManufacturerPart: RC0402FR-07100RL; Supplier Footprint: 0402; JLCPCB Part Class: Extended Part; Datasheet: https://item.szlcsc.com/datasheet/RC0402FR-07100RL/107447.html; Supplier: LCSC; ConvertToPcb: yes; FootprintName: R0402; Type: 厚膜电阻; Value: 100Ω; Temperature Coefficient: ±100ppm/℃; Operating Temperature: -55℃~+155℃
footprint R0402
pins: 1, 2

## RC-02K1212FT
designator R?, comment 12.1kΩ
电阻类型:厚膜电阻;阻值:12.1kΩ;精度:±1%;功率:62.5mW;最大工作电压:50V;温度系数:±100ppm/℃;; Manufacturer: FH(风华); Symbol: RS-02K1212FT; Device: RC-02K1212FT; AddInBom: yes; ModelId: 98c88bc2b9094f218f3a3e30a7012738聨0819f05c4eef4c71ace90d822a990e87; ModelName: R0402_L1.0-W0.5-H0.4; ModelTransform: 39.37,19.685,0,0,0,0,0,0,0; Tolerance: ±1%; Power(Watts): 62.5mW; Overload Voltage (Max): 50V; LCSC Part Name: 厚膜电阻 12.1kΩ ±1% 62.5mW; SupplierPart: C140207; ManufacturerPart: RC-02K1212FT; Supplier Footprint: 0402; JLCPCB Part Class: Extended Part; Datasheet: https://atta.szlcsc.com/upload/public/pdf/source/20140616/1457707091974.pdf; Supplier: LCSC; ConvertToPcb: yes; FootprintName: R0402; Type: 厚膜电阻; Value: 12.1kΩ; Temperature Coefficient: ±100ppm/℃; Operating Temperature Range: -55℃~+155℃
footprint R0402
pins: 1, 2

## RE0805FAR000
designator R?, comment 0Ω
电阻类型:合金电阻;阻值:0Ω;精度:±1%;功率:500mW;温度系数:±50ppm/℃;安装方式:贴片;; Manufacturer: JIERR(捷而瑞); Symbol: RE0805FAR000; AddInBom: yes; ModelId: 37a81e68749a4138bd2dfa6897b24b85聨0819f05c4eef4c71ace90d822a990e87; ModelName: R0805_L2.0-W1.3-H0.6; ModelTransform: 78.74,51.181,0,0,0,0,0,-0.0005,0; Tolerance: ±1%; Power(Watts): 500mW; Device: RE0805FAR000; LCSC Part Name: 0Ω 0.5W 0805 ±1%; SupplierPart: C51934133; ManufacturerPart: RE0805FAR000; Supplier Footprint: 0805; JLCPCB Part Class: Extended Part; Datasheet: https://item.szlcsc.com/datasheet/RE0805FAR000/54649545.html; Supplier: LCSC; ConvertToPcb: yes; FootprintName: R0805; Type: 合金电阻; Value: 0Ω; Temperature Coefficient: ±50ppm/℃; Mounting Type: 贴片
footprint R0805
pins: 1, 2

## RK809-5
designator U?
Manufacturer: Rockchip(瑞芯微); AddInBom: yes; ModelId: e930c577e1fa4bd28a96171513c1b833聨0819f05c4eef4c71ace90d822a990e87; ModelName: QFN-68_L7.0-W7.0-H0.8-P0.35-BL-EP5.5; ModelTransform: 275.591,275.591,0,0,0,0,0,0,0; Interface: I2C; Input Voltage: 2.7V~5.5V; Output Voltage: 0.5V~3.4V；0.6V~3.4V；1.5V~3.6V；0.5V~2.4V; Output Current: 2.5A; Symbol: RK809-5; Device: RK809-5; LCSC Part Name: RK809-5; SupplierPart: C2939628; ManufacturerPart: RK809-5; Supplier Footprint: QFN-68-EP(7x7); JLCPCB Part Class: Extended Part; Datasheet: https://item.szlcsc.com/datasheet/RK809-5/3300621.html; Supplier: LCSC; ConvertToPcb: yes; FootprintName: QFN-68_L7.0-W7.0-P0.35-BL-EP5.5; Features: 上电时序控制；动态电压调节; Operating Temperature: -40℃~+125℃
footprint QFN-68_L7.0-W7.0-P0.35-BL-EP5.5
pins: 1 SCL, 2 SDA, 3 LDO7, 4 VCC7, 5 LDO8, 6 LDO9, 7 INT, 8 FB2, 9 SW2, 10 VCC2, 11 VCC1, 12 SW1, 13 FB1, 14 LRCLK, 15 BCLK, 16 MCLK, 17 SDI, 18 SDO/PDMDATA, 19 PDMCLK, 20 LDO3, 21 LDO2, 22 VCC5, 23 LDO1, 24 VCC3, 25 SW3, 26 VBUCK3, 27 FB3, 28 LDO4, 29 LDO5, 30 VCC6, 31 LDO6, 32 SPKP_OUT, 33 VCC_SPK_HP, 34 SPKN_OUT, 35 VCC_CPVSS, 36 CPN, 37 CPP, 38 VCC_CPVDD, 39 HPL_OUT, 40 HP_SNS, 41 HPR_OUT, 42 MICIN, 43 MICIP, 44 VCC_1P8A, 45 VCC_RTC, 46 VREF, 47 GNDREF, 48 VCC_1P8D, 49 SLEEP, 50 XIN, 51 XOUT, 52 PWRON, 53 SW5, 54 VCC9, 55 SWOUT1, 56 BATDIV, 57 VCC8, 58 SWOUT2, 59 FB5, 60 EXT_EN, 61 VDC, 62 SNSP, 63 SNSN, 64 FB4, 65 SW4, 66 VCC4, 67 RESETB, 68 CLK32K, 69 EP

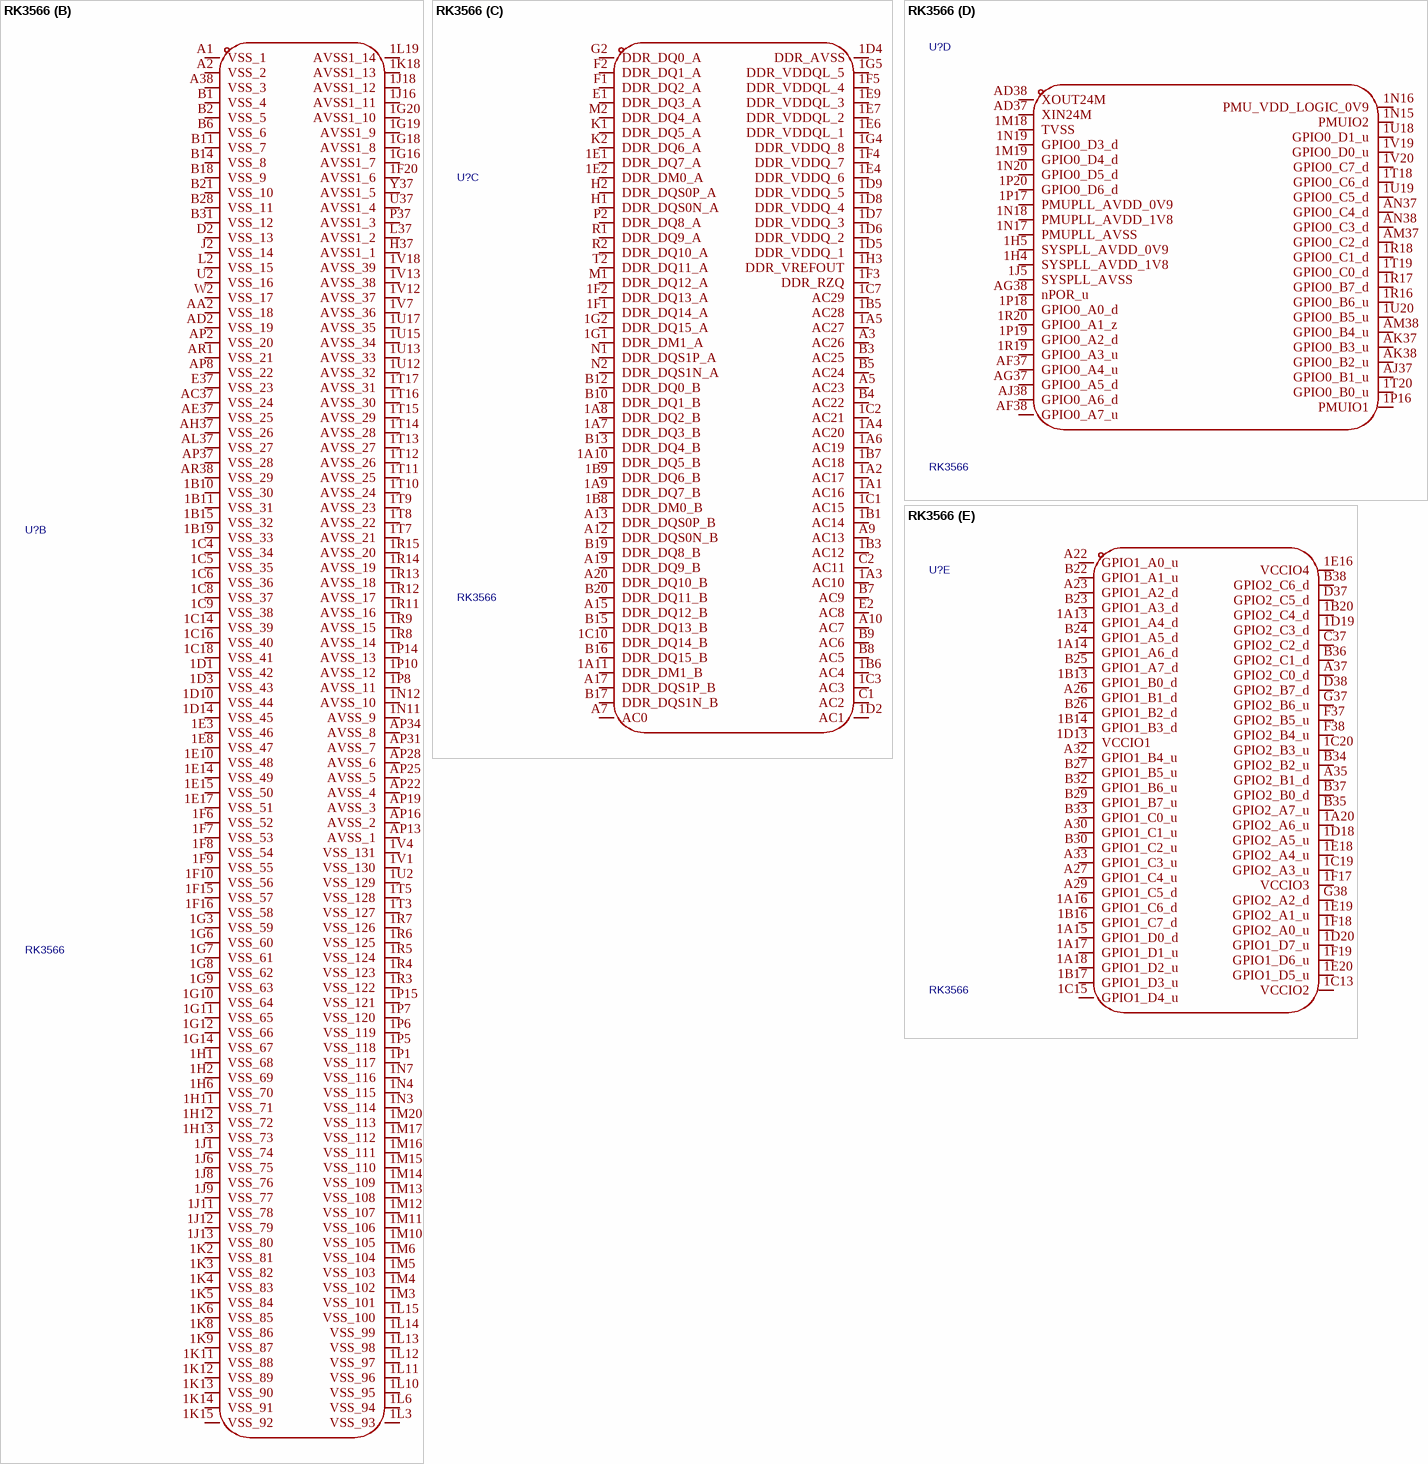
[diagram p3: symbol RK3566]

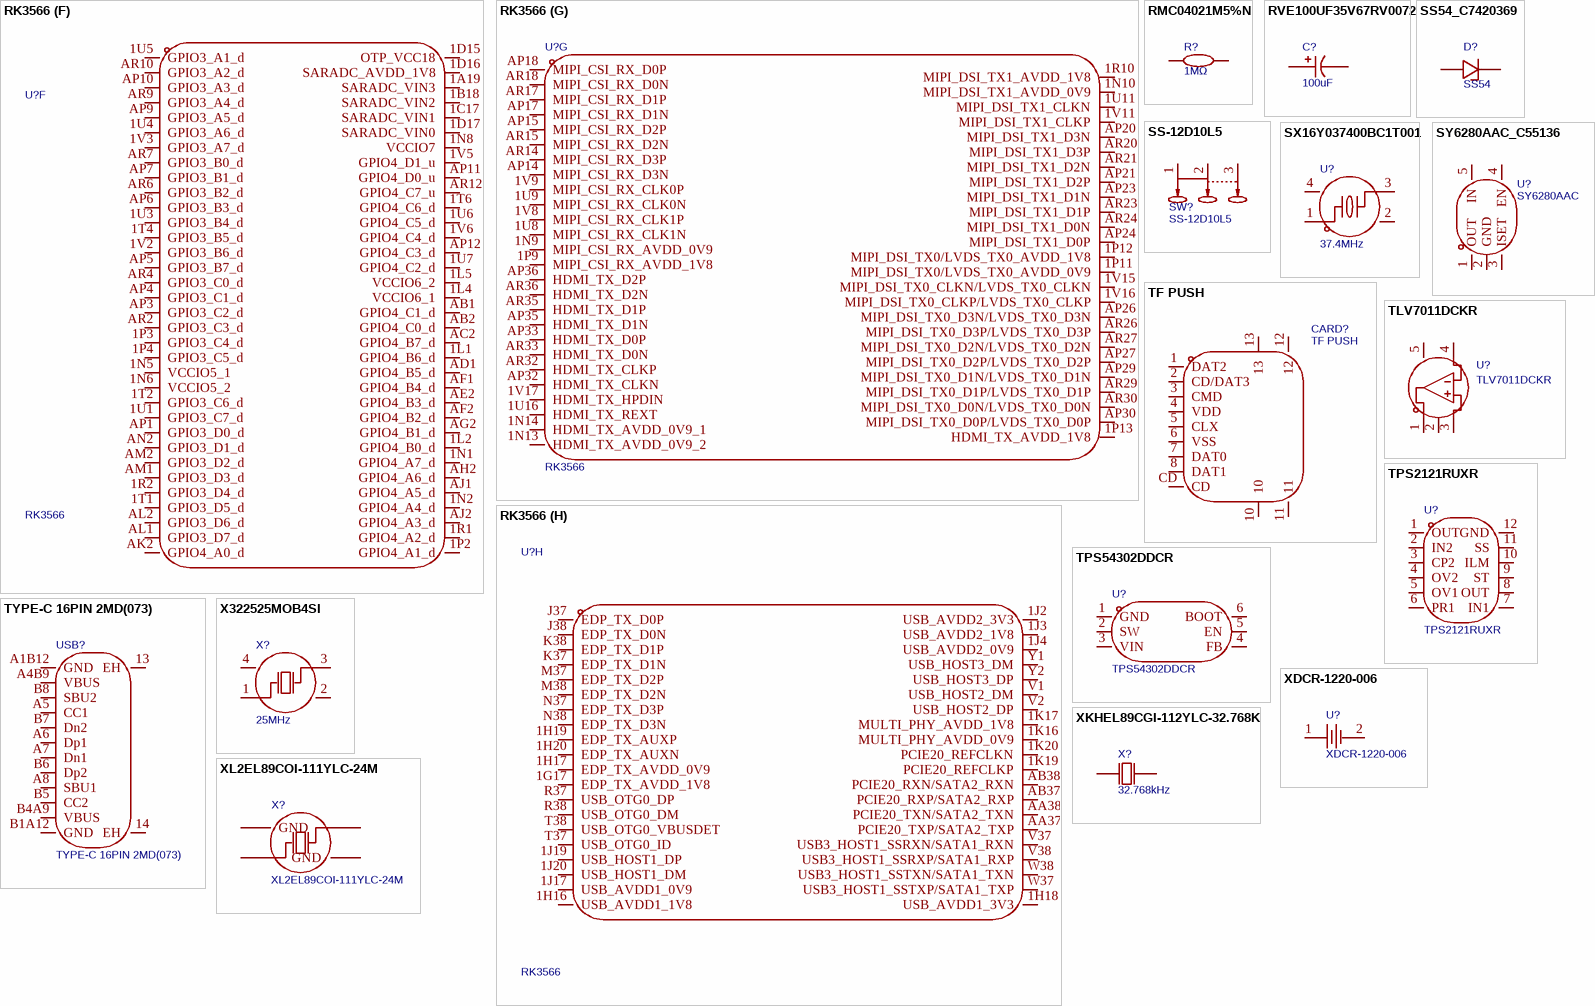
[diagram p4: symbols RK3566 to XL2EL89COI-111YLC-24M]

## RK3566
designator U?
是一款高性能、低功耗的四核应用处理器，专为个人移动互联网设备和AIoT设备设计。提供了许多嵌入式强大硬件引擎，以优化高端应用的性能。支持几乎全格式的H.264 4K@60fps解码器、H.265 4K@60fps解码器，还支持H.264/H.265 1080p@60fps编码器、高质量JPEG编码器/解码器。嵌入式3D GPU使其完全兼容OpenGL ES 1.1/2.0/3.2、OpenCL 2.0和Vulkan 1.1; Manufacturer: Rockchip(瑞芯微); Relevance: []; 3D Model: 096be4498db445d8b521581a084e15ec聨0819f05c4eef4c71ace90d822a990e87; 3D Model Transform: 610.235,566.928,0,0,0,0,0,0,0; AddInBom: yes; ModelName: BGA-565_L15.5-W14.4-P0.40_RK3566_1; Symbol: RK3566; Device: RK3566; LCSC Part Name: 表面贴装型开关全行程、动作力等性能; Supplier Part: C2943786; Manufacturer Part: RK3566; Supplier Footprint: BGA-565(15.5x14.4); JLCPCB Part Class: Extended Part; Datasheet: https://item.szlcsc.com/datasheet/RK3566/3329057.html; Supplier: LCSC; ConvertToPcb: yes; FootprintName: BGA-565_L15.5-W14.4-P0.40_RK3566_1
footprint BGA-565_L15.5-W14.4-P0.40_RK3566_1
3D model BGA-565_L15.5-W14.4-P0.40_RK3566_1
part A pins: 1C12 VDD_CPU_1, 1D11 VDD_CPU_2, 1D12 VDD_CPU_3, 1E11 VDD_CPU_4, 1E12 VDD_CPU_5, 1E13 VDD_CPU_6, 1F11 VDD_CPU_7, 1F12 VDD_CPU_8, 1F13 VDD_CPU_9, 1F14 VDD_CPU_10, 1G13 VDD_CPU_11, 1G15 VDD_NPU_1, 1H7 VDD_LOGIC_1, 1H8 VDD_LOGIC_2, 1H9 VDD_LOGIC_3, 1H10 VDD_LOGIC_4, 1H14 VDD_NPU_2, 1H15 VDD_NPU_3, 1J7 VDD_LOGIC_5, 1J10 VDD_LOGIC_6, 1J14 VDD_NPU_4, 1J15 VDD_NPU_5, 1K7 VDD_LOGIC_7, 1K10 VDD_LOGIC_8, 1L7 VDD_LOGIC_9, 1L8 VDD_GPU_1, 1L9 VDD_GPU_2, 1M7 VDD_GPU_3, 1M8 VDD_GPU_4, 1M9 VDD_GPU_5
part B pins: 1B10 VSS_30, 1B11 VSS_31, 1B15 VSS_32, 1B19 VSS_33, 1C4 VSS_34, 1C5 VSS_35, 1C6 VSS_36, 1C8 VSS_37, 1C9 VSS_38, 1C14 VSS_39, 1C16 VSS_40, 1C18 VSS_41, 1D1 VSS_42, 1D3 VSS_43, 1D10 VSS_44, 1D14 VSS_45, 1E3 VSS_46, 1E8 VSS_47, 1E10 VSS_48, 1E14 VSS_49, 1E15 VSS_50, 1E17 VSS_51, 1F6 VSS_52, 1F7 VSS_53, 1F8 VSS_54, 1F9 VSS_55, 1F10 VSS_56, 1F15 VSS_57, 1F16 VSS_58, 1F20 AVSS1_6, 1G3 VSS_59, 1G6 VSS_60, 1G7 VSS_61, 1G8 VSS_62, 1G9 VSS_63, 1G10 VSS_64, 1G11 VSS_65, 1G12 VSS_66, 1G14 VSS_67, 1G16 AVSS1_7, 1G18 AVSS1_8, 1G19 AVSS1_9, 1G20 AVSS1_10, 1H1 VSS_68, 1H2 VSS_69, 1H6 VSS_70, 1H11 VSS_71, 1H12 VSS_72, 1H13 VSS_73, 1J1 VSS_74, 1J6 VSS_75, 1J8 VSS_76, 1J9 VSS_77, 1J11 VSS_78, 1J12 VSS_79, 1J13 VSS_80, 1J16 AVSS1_11, 1J18 AVSS1_12, 1K2 VSS_81, 1K3 VSS_82, 1K4 VSS_83, 1K5 VSS_84, 1K6 VSS_85, 1K8 VSS_86, 1K9 VSS_87, 1K11 VSS_88, 1K12 VSS_89, 1K13 VSS_90, 1K14 VSS_91, 1K15 VSS_92, 1K18 AVSS1_13, 1L3 VSS_93, 1L6 VSS_94, 1L10 VSS_95, 1L11 VSS_96, 1L12 VSS_97, 1L13 VSS_98, 1L14 VSS_99, 1L15 VSS_100, 1L19 AVSS1_14, 1M3 VSS_101, 1M4 VSS_102, 1M5 VSS_103, 1M6 VSS_104, 1M10 VSS_105, 1M11 VSS_106, 1M12 VSS_107, 1M13 VSS_108, 1M14 VSS_109, 1M15 VSS_110, 1M16 VSS_111, 1M17 VSS_112, 1M20 VSS_113, 1N3 VSS_114, 1N4 VSS_115, 1N7 VSS_116, 1N11 AVSS_9, 1N12 AVSS_10, 1P1 VSS_117, 1P5 VSS_118, 1P6 VSS_119, 1P7 VSS_120, 1P8 AVSS_11, 1P10 AVSS_12, 1P14 AVSS_13, 1P15 VSS_121, 1R3 VSS_122, 1R4 VSS_123, 1R5 VSS_124, 1R6 VSS_125, 1R7 VSS_126, 1R8 AVSS_14, 1R9 AVSS_15, 1R11 AVSS_16, 1R12 AVSS_17, 1R13 AVSS_18, 1R14 AVSS_19, 1R15 AVSS_20, 1T3 VSS_127, 1T5 VSS_128, 1T7 AVSS_21, 1T8 AVSS_22, 1T9 AVSS_23, 1T10 AVSS_24, 1T11 AVSS_25, 1T12 AVSS_26, 1T13 AVSS_27, 1T14 AVSS_28, 1T15 AVSS_29, 1T16 AVSS_30, 1T17 AVSS_31, 1U2 VSS_129, 1U12 AVSS_32, 1U13 AVSS_33, 1U15 AVSS_34, 1U17 AVSS_35, 1V1 VSS_130, 1V4 VSS_131, 1V7 AVSS_36, 1V12 AVSS_37, 1V13 AVSS_38, 1V18 AVSS_39, A1 VSS_1, A2 VSS_2, A38 VSS_3, AA2 VSS_18, AC37 VSS_24, AD2 VSS_19, AE37 VSS_25, AH37 VSS_26, AL37 VSS_27, AP2 VSS_20, AP8 VSS_22, AP13 AVSS_1, AP16 AVSS_2, AP19 AVSS_3, AP22 AVSS_4, AP25 AVSS_5, AP28 AVSS_6, AP31 AVSS_7, AP34 AVSS_8, AP37 VSS_28, AR1 VSS_21, AR38 VSS_29, B1 VSS_4, B2 VSS_5, B6 VSS_6, B11 VSS_7, B14 VSS_8, B18 VSS_9, B21 VSS_10, B28 VSS_11, B31 VSS_12, D2 VSS_13, E37 VSS_23, H37 AVSS1_1, J2 VSS_14, L2 VSS_15, L37 AVSS1_2, P37 AVSS1_3, U2 VSS_16, U37 AVSS1_4, W2 VSS_17, Y37 AVSS1_5
part C pins: 1A1 AC16, 1A2 AC17, 1A3 AC10, 1A4 AC20, 1A5 AC27, 1A6 AC19, 1A7 DDR_DQ3_B, 1A8 DDR_DQ2_B, 1A9 DDR_DQ7_B, 1A10 DDR_DQ5_B, 1A11 DDR_DM1_B, 1B1 AC14, 1B3 AC12, 1B5 AC28, 1B6 AC4, 1B7 AC18, 1B8 DDR_DM0_B, 1B9 DDR_DQ6_B, 1C1 AC15, 1C2 AC21, 1C3 AC3, 1C7 AC29, 1C10 DDR_DQ14_B, 1D2 AC1, 1D4 DDR_AVSS, 1D5 DDR_VDDQ_1, 1D6 DDR_VDDQ_2, 1D7 DDR_VDDQ_3, 1D8 DDR_VDDQ_4, 1D9 DDR_VDDQ_5, 1E1 DDR_DQ7_A, 1E2 DDR_DM0_A, 1E4 DDR_VDDQ_6, 1E6 DDR_VDDQL_1, 1E7 DDR_VDDQL_2, 1E9 DDR_VDDQL_3, 1F1 DDR_DQ14_A, 1F2 DDR_DQ13_A, 1F3 DDR_RZQ, 1F4 DDR_VDDQ_7, 1F5 DDR_VDDQL_4, 1G1 DDR_DM1_A, 1G2 DDR_DQ15_A, 1G4 DDR_VDDQ_8, 1G5 DDR_VDDQL_5, 1H3 DDR_VREFOUT, A3 AC26, A5 AC23, A7 AC0, A9 AC13, A10 AC7, A12 DDR_DQS0N_B, A13 DDR_DQS0P_B, A15 DDR_DQ12_B, A17 DDR_DQS1P_B, A19 DDR_DQ9_B, A20 DDR_DQ10_B, B3 AC25, B4 AC22, B5 AC24, B7 AC9, B8 AC5, B9 AC6, B10 DDR_DQ1_B, B12 DDR_DQ0_B, B13 DDR_DQ4_B, B15 DDR_DQ13_B, B16 DDR_DQ15_B, B17 DDR_DQS1N_B, B19 DDR_DQ8_B, B20 DDR_DQ11_B, C1 AC2, C2 AC11, E1 DDR_DQ3_A, E2 AC8, F1 DDR_DQ2_A, F2 DDR_DQ1_A, G2 DDR_DQ0_A, H1 DDR_DQS0N_A, H2 DDR_DQS0P_A, K1 DDR_DQ5_A, K2 DDR_DQ6_A, M1 DDR_DQ12_A, M2 DDR_DQ4_A, N1 DDR_DQS1P_A, N2 DDR_DQS1N_A, P2 DDR_DQ8_A, R1 DDR_DQ9_A, R2 DDR_DQ10_A, T2 DDR_DQ11_A
part D pins: 1H4 SYSPLL_AVDD_1V8, 1H5 SYSPLL_AVDD_0V9, 1J5 SYSPLL_AVSS, 1M18 TVSS, 1M19 GPIO0_D4_d, 1N15 PMUIO2, 1N16 PMU_VDD_LOGIC_0V9, 1N17 PMUPLL_AVSS, 1N18 PMUPLL_AVDD_1V8, 1N19 GPIO0_D3_d, 1N20 GPIO0_D5_d, 1P16 PMUIO1, 1P17 PMUPLL_AVDD_0V9, 1P18 GPIO0_A0_d, 1P19 GPIO0_A2_d, 1P20 GPIO0_D6_d, 1R16 GPIO0_B6_u, 1R17 GPIO0_B7_d, 1R18 GPIO0_C1_d, 1R19 GPIO0_A3_u, 1R20 GPIO0_A1_z, 1T18 GPIO0_C6_d, 1T19 GPIO0_C0_d, 1T20 GPIO0_B0_u, 1U18 GPIO0_D1_u, 1U19 GPIO0_C5_d, 1U20 GPIO0_B5_u, 1V19 GPIO0_D0_u, 1V20 GPIO0_C7_d, AD37 XIN24M, AD38 XOUT24M, AF37 GPIO0_A4_u, AF38 GPIO0_A7_u, AG37 GPIO0_A5_d, AG38 nPOR_u, AJ37 GPIO0_B1_u, AJ38 GPIO0_A6_d, AK37 GPIO0_B3_u, AK38 GPIO0_B2_u, AM37 GPIO0_C2_d, AM38 GPIO0_B4_u, AN37 GPIO0_C4_d, AN38 GPIO0_C3_d
part E pins: 1A13 GPIO1_A4_d, 1A14 GPIO1_A6_d, 1A15 GPIO1_D0_d, 1A16 GPIO1_C6_d, 1A17 GPIO1_D1_u, 1A18 GPIO1_D2_u, 1A20 GPIO2_A6_u, 1B13 GPIO1_B0_d, 1B14 GPIO1_B3_d, 1B16 GPIO1_C7_d, 1B17 GPIO1_D3_u, 1B20 GPIO2_C4_d, 1C13 VCCIO2, 1C15 GPIO1_D4_u, 1C19 GPIO2_A3_u, 1C20 GPIO2_B3_u, 1D13 VCCIO1, 1D18 GPIO2_A5_u, 1D19 GPIO2_C3_d, 1D20 GPIO1_D7_u, 1E16 VCCIO4, 1E18 GPIO2_A4_u, 1E19 GPIO2_A1_u, 1E20 GPIO1_D5_u, 1F17 VCCIO3, 1F18 GPIO2_A0_u, 1F19 GPIO1_D6_u, A22 GPIO1_A0_u, A23 GPIO1_A2_d, A26 GPIO1_B1_d, A27 GPIO1_C4_u, A29 GPIO1_C5_d, A30 GPIO1_C1_u, A32 GPIO1_B4_u, A33 GPIO1_C3_u, A35 GPIO2_B1_d, A37 GPIO2_C0_d, B22 GPIO1_A1_u, B23 GPIO1_A3_d, B24 GPIO1_A5_d, B25 GPIO1_A7_d, B26 GPIO1_B2_d, B27 GPIO1_B5_u, B29 GPIO1_B7_u, B30 GPIO1_C2_u, B32 GPIO1_B6_u, B33 GPIO1_C0_u, B34 GPIO2_B2_u, B35 GPIO2_A7_u, B36 GPIO2_C1_d, B37 GPIO2_B0_d, B38 GPIO2_C6_d, C37 GPIO2_C2_d, D37 GPIO2_C5_d, D38 GPIO2_B7_d, F37 GPIO2_B5_u, F38 GPIO2_B4_u, G37 GPIO2_B6_u, G38 GPIO2_A2_d
part F pins: 1A19 SARADC_VIN3, 1B18 SARADC_VIN2, 1C17 SARADC_VIN1, 1D15 OTP_VCC18, 1D16 SARADC_AVDD_1V8, 1D17 SARADC_VIN0, 1L1 GPIO4_B6_d, 1L2 GPIO4_B0_d, 1L4 VCCIO6_1, 1L5 VCCIO6_2, 1N1 GPIO4_A7_d, 1N2 GPIO4_A4_d, 1N5 VCCIO5_1, 1N6 VCCIO5_2, 1N8 VCCIO7, 1P2 GPIO4_A1_d, 1P3 GPIO3_C4_d, 1P4 GPIO3_C5_d, 1R1 GPIO4_A2_d, 1R2 GPIO3_D4_d, 1T1 GPIO3_D5_d, 1T2 GPIO3_C6_d, 1T4 GPIO3_B5_d, 1T6 GPIO4_C6_d, 1U1 GPIO3_C7_d, 1U3 GPIO3_B4_d, 1U4 GPIO3_A6_d, 1U5 GPIO3_A1_d, 1U6 GPIO4_C5_d, 1U7 GPIO4_C2_d, 1V2 GPIO3_B6_d, 1V3 GPIO3_A7_d, 1V5 GPIO4_D1_u, 1V6 GPIO4_C4_d, AB1 GPIO4_C1_d, AB2 GPIO4_C0_d, AC2 GPIO4_B7_d, AD1 GPIO4_B5_d, AE2 GPIO4_B3_d, AF1 GPIO4_B4_d, AF2 GPIO4_B2_d, AG2 GPIO4_B1_d, AH2 GPIO4_A6_d, AJ1 GPIO4_A5_d, AJ2 GPIO4_A3_d, AK2 GPIO4_A0_d, AL1 GPIO3_D7_d, AL2 GPIO3_D6_d, AM1 GPIO3_D3_d, AM2 GPIO3_D2_d, AN2 GPIO3_D1_d, AP1 GPIO3_D0_d, AP3 GPIO3_C2_d, AP4 GPIO3_C1_d, AP5 GPIO3_B7_d, AP6 GPIO3_B3_d, AP7 GPIO3_B1_d, AP9 GPIO3_A5_d, AP10 GPIO3_A3_d, AP11 GPIO4_D0_u, AP12 GPIO4_C3_d, AR2 GPIO3_C3_d, AR4 GPIO3_C0_d, AR6 GPIO3_B2_d, AR7 GPIO3_B0_d, AR9 GPIO3_A4_d, AR10 GPIO3_A2_d, AR12 GPIO4_C7_u
part G pins: 1N9 MIPI_CSI_RX_AVDD_0V9, 1N10 MIPI_DSI_TX1_AVDD_0V9, 1N13 HDMI_TX_AVDD_0V9_2, 1N14 HDMI_TX_AVDD_0V9_1, 1P9 MIPI_CSI_RX_AVDD_1V8, 1P11 MIPI_DSI_TX0/LVDS_TX0_AVDD_0V9, 1P12 MIPI_DSI_TX0/LVDS_TX0_AVDD_1V8, 1P13 HDMI_TX_AVDD_1V8, 1R10 MIPI_DSI_TX1_AVDD_1V8, 1U8 MIPI_CSI_RX_CLK1N, 1U9 MIPI_CSI_RX_CLK0N, 1U11 MIPI_DSI_TX1_CLKN, 1U16 HDMI_TX_REXT, 1V8 MIPI_CSI_RX_CLK1P, 1V9 MIPI_CSI_RX_CLK0P, 1V11 MIPI_DSI_TX1_CLKP, 1V15 MIPI_DSI_TX0_CLKN/LVDS_TX0_CLKN, 1V16 MIPI_DSI_TX0_CLKP/LVDS_TX0_CLKP, 1V17 HDMI_TX_HPDIN, AP14 MIPI_CSI_RX_D3N, AP15 MIPI_CSI_RX_D2P, AP17 MIPI_CSI_RX_D1N, AP18 MIPI_CSI_RX_D0P, AP20 MIPI_DSI_TX1_D3N, AP21 MIPI_DSI_TX1_D2P, AP23 MIPI_DSI_TX1_D1N, AP24 MIPI_DSI_TX1_D0P, AP26 MIPI_DSI_TX0_D3N/LVDS_TX0_D3N, AP27 MIPI_DSI_TX0_D2P/LVDS_TX0_D2P, AP29 MIPI_DSI_TX0_D1N/LVDS_TX0_D1N, AP30 MIPI_DSI_TX0_D0P/LVDS_TX0_D0P, AP32 HDMI_TX_CLKN, AP33 HDMI_TX_D0P, AP35 HDMI_TX_D1N, AP36 HDMI_TX_D2P, AR14 MIPI_CSI_RX_D3P, AR15 MIPI_CSI_RX_D2N, AR17 MIPI_CSI_RX_D1P, AR18 MIPI_CSI_RX_D0N, AR20 MIPI_DSI_TX1_D3P, AR21 MIPI_DSI_TX1_D2N, AR23 MIPI_DSI_TX1_D1P, AR24 MIPI_DSI_TX1_D0N, AR26 MIPI_DSI_TX0_D3P/LVDS_TX0_D3P, AR27 MIPI_DSI_TX0_D2N/LVDS_TX0_D2N, AR29 MIPI_DSI_TX0_D1P/LVDS_TX0_D1P, AR30 MIPI_DSI_TX0_D0N/LVDS_TX0_D0N, AR32 HDMI_TX_CLKP, AR33 HDMI_TX_D0N, AR35 HDMI_TX_D1P, AR36 HDMI_TX_D2N
part H pins: 1G17 EDP_TX_AVDD_1V8, 1H16 USB_AVDD1_1V8, 1H17 EDP_TX_AVDD_0V9, 1H18 USB_AVDD1_3V3, 1H19 EDP_TX_AUXP, 1H20 EDP_TX_AUXN, 1J2 USB_AVDD2_3V3, 1J3 USB_AVDD2_1V8, 1J4 USB_AVDD2_0V9, 1J17 USB_AVDD1_0V9, 1J19 USB_HOST1_DP, 1J20 USB_HOST1_DM, 1K16 MULTI_PHY_AVDD_0V9, 1K17 MULTI_PHY_AVDD_1V8, 1K19 PCIE20_REFCLKP, 1K20 PCIE20_REFCLKN, AA37 PCIE20_TXP/SATA2_TXP, AA38 PCIE20_TXN/SATA2_TXN, AB37 PCIE20_RXP/SATA2_RXP, AB38 PCIE20_RXN/SATA2_RXN, J37 EDP_TX_D0P, J38 EDP_TX_D0N, K37 EDP_TX_D1N, K38 EDP_TX_D1P, M37 EDP_TX_D2P, M38 EDP_TX_D2N, N37 EDP_TX_D3P, N38 EDP_TX_D3N, R37 USB_OTG0_DP, R38 USB_OTG0_DM, T37 USB_OTG0_ID, T38 USB_OTG0_VBUSDET, V1 USB_HOST2_DM, V2 USB_HOST2_DP, V37 USB3_HOST1_SSRXN/SATA1_RXN, V38 USB3_HOST1_SSRXP/SATA1_RXP, W37 USB3_HOST1_SSTXP/SATA1_TXP, W38 USB3_HOST1_SSTXN/SATA1_TXN, Y1 USB_HOST3_DM, Y2 USB_HOST3_DP

## RMC04021M5%N
designator R?, comment 1MΩ
阻值:1MΩ;精度:±5%;功率:62.5mW;; Manufacturer: Tyohm(幸亚电阻); Symbol: RMC04021M5%N; 3D Model: 671aefced39d4c318694bba8bd8efd39; 3D Model Transform: 39.37,19.685,0,0,0,0,0,0.0005,0; Tolerance: ±5%; Power(Watts): 62.5mW; AddInBom: yes; ModelName: R0402_L1.0-W0.5-H0.5; Device: RMC04021M5%N; LCSC Part Name: 1MΩ ±5% 62.5mW; Supplier Part: C325525; Manufacturer Part: RMC04021M5%N; Supplier Footprint: 0402; JLCPCB Part Class: 扩展库; Datasheet: https://atta.szlcsc.com/upload/public/pdf/source/20190115/C325525_90ADED69DA9348756F9671214E48FF04.pdf; Supplier: LCSC; Value: 1MΩ; ConvertToPcb: yes; FootprintName: R0402
footprint R0402
3D model R0402_L1.0-W0.5-H0.5
pins: 1, 2

## RVE100UF35V67RV0072
designator C?, comment 100uF
容值:100uF;精度:±20%;额定电压:35V;纹波电流:230mA@120Hz;等效串联电阻(ESR):600mΩ@100kHz;; Manufacturer: KNSCHA(科尼盛); Symbol: RVE100UF35V67RV0072; AddInBom: yes; ModelId: e9bf03a505e14561b78f20847edc0c03聨0819f05c4eef4c71ace90d822a990e87; ModelName: CAP-SMD_BD6.3-L6.6-W6.6-LS7.6-FD-1; ModelTransform: 283.464,259.842,0,180,0,0,0,0,0; Tolerance: ±20%; Voltage Rating: 35V; Lifetime: 2000hrs@105℃; Device: RVE100UF35V67RV0072; LCSC Part Name: 100uF ±20% 35V; SupplierPart: C2836437; ManufacturerPart: RVE100UF35V67RV0072; Supplier Footprint: SMD,D6.3xL7.7mm; JLCPCB Part Class: Extended Part; Datasheet: https://item.szlcsc.com/datasheet/RVE100UF35V67RV0072/3002609.html; Supplier: LCSC; ConvertToPcb: yes; FootprintName: CAP-SMD_BD6.3-L6.6-W6.6-LS7.6-FD-1; Value: 100uF; Ripple Current: 230mA@120Hz; Equivalent Series Resistance(ESR): 600mΩ@100kHz; Diameter: 6.3mm; Height - Seated (Max): 7.7mm; Operating Temperature: -55℃~+105℃
footprint CAP-SMD_BD6.3-L6.6-W6.6-LS7.6-FD-1
pins: 1, 2

## SS54_C7420369
designator D?, comment SS54
二极管配置:1个独立式;正向压降(Vf):550mV@5A;直流反向耐压(Vr):40V;整流电流:5A;; Manufacturer: R+O(宏嘉诚); Symbol: SS54_C7420369; AddInBom: yes; ModelId: 7e24bebe6cd74171ae8c9de6fc5b78aa聨0819f05c4eef4c71ace90d822a990e87; ModelName: SMA_L4.3-W2.6-LS5.0-FD; ModelTransform: 198.4248,103.5431,0,180,0,0,-0.001,0,0; Diode Configuration: 1个独立式; Voltage - DC Reverse(Vr): 40V; Current - Rectified: 5A; Reverse Leakage Current (Ir): 200uA@40V; Operating Junction Temperature Range: -55℃~+125℃; Non-Repetitive Peak Forward Surge Current: 120A; Device: SS54_C7420369; LCSC Part Name: 电压:40V 电流:5A; SupplierPart: C7420369; ManufacturerPart: SS54; Supplier Footprint: SMA(DO-214AC); JLCPCB Part Class: Extended Part; Datasheet: https://item.szlcsc.com/datasheet/SS54/8397191.html; Supplier: LCSC; ConvertToPcb: yes; FootprintName: SMA_L4.3-W2.6-LS5.0-FD; Voltage - Forward(Vf@If): 550mV@5A; Power Dissipation: -
footprint SMA_L4.3-W2.6-LS5.0-FD
pins: 1 A, 2 K

## SS-12D10L5
designator SW?
电路结构:单刀双掷;安装方式:直插;开关颜色:黑色;额定电流:3A;额定电压:125V;工作寿命:1万次;; Manufacturer: XKB Connection(中国星坤); AddInBom: yes; ModelId: c49f07a32c154ec8ad7cf47670a53981聨0819f05c4eef4c71ace90d822a990e87; ModelName: SW-TH_L13.0-W6.8-H6.4-P4.7; ModelTransform: 511.81394,267.716,0,0,0,0,0,0,-220.472; Circuit: 单刀双掷; Actuator Style: 矩形柱状; Switch Height: 6.4mm; Actuator Color: 黑色; Current Rating: 3A; Voltage Rating: 125V; Life: 1万次; Symbol: SS-12D10L5; Device: SS-12D10L5; LCSC Part Name: 柄长5mm 直插双档 滑动开关; SupplierPart: C319012; ManufacturerPart: SS-12D10L5; Supplier Footprint: 插件,13x6.8mm; JLCPCB Part Class: Extended Part; Datasheet: https://item.szlcsc.com/datasheet/SS-12D10L5/300104.html; Supplier: LCSC; ConvertToPcb: yes; FootprintName: SW-TH_SS-12D10L5; Termination Style: PC引脚; Length: 13mm; Width: 6.8mm; Mounting Type: 直插; Operating Temperature: -40℃~+85℃
footprint SW-TH_SS-12D10L5
pins: 1, 2, 3

## SX16Y037400BC1T001
designator U?, comment 37.4MHz
晶振类型:贴片晶振;频率:37.4MHz;常温频差:±10ppm;负载电容:12pF;; Manufacturer: TKD(泰晶); Symbol: SX16Y037400BC1T001; AddInBom: yes; ModelId: b29ae56bafdc44b68620701fbba13e71聨0819f05c4eef4c71ace90d822a990e87; ModelName: OSC-SMD_4P-L1.6-W1.2-BL-1; ModelTransform: 62.992,47.244,0,0,0,0,0,0,0; Normal temperature Frequency Tolerance: ±10ppm; Load Capacitance: 12pF; Equivalent Series Resistance(ESR): 60Ω; Device: SX16Y037400BC1T001; LCSC Part Name: 37.4MHz ±10ppm 12pF; SupplierPart: C20623632; ManufacturerPart: SX16Y037400BC1T001; Supplier Footprint: SMD1612-4P; JLCPCB Part Class: Extended Part; Datasheet: https://item.szlcsc.com/datasheet/SX16Y037400BC1T001/22021338.html; Supplier: LCSC; ConvertToPcb: yes; FootprintName: OSC-SMD_4P-L1.6-W1.2-BL-1; Type: 贴片晶振; Value: 37.4MHz; Operating Temperature: -30℃~+85℃
footprint OSC-SMD_4P-L1.6-W1.2-BL-1
pins: 1, 2 GND, 3, 4 GND

## SY6280AAC_C55136
designator U?, comment SY6280AAC
类型:高侧开关;通道数:1;输入控制逻辑:高电平有效;工作电压:2.4V~5.5V;最大连续电流:2A;导通电阻:80mΩ;; Manufacturer: Silergy(矽力杰); Device: SY6280AAC_C55136; AddInBom: yes; ModelId: 0a2a1b8f50944f73965918ad6e5fe167聨0819f05c4eef4c71ace90d822a990e87; ModelName: SOT-23-5_L2.9-W1.6-H1.1-LS2.8-P0.95; ModelTransform: 118.60433,114.173,0,90,0,0,0.0005,0.0005,0; Number of Channels: 1; Control Input Logic: 高电平有效; Maximum Continuous Current: 2A; RDS(on): 80mΩ; Symbol: SY6280AAC; LCSC Part Name: 低损耗功率分配开关; SupplierPart: C55136; ManufacturerPart: SY6280AAC; Supplier Footprint: SOT-23-5; JLCPCB Part Class: Extended Part; Datasheet: https://item.szlcsc.com/datasheet/SY6280AAC/56162.html; Supplier: LCSC; ConvertToPcb: yes; FootprintName: SOT-23-5_L3.0-W1.7-P0.95-LS2.8-BL; Type: 高侧开关; Voltage - Supply: 2.4V~5.5V; Features: 短路保护；过流保护；反向电流阻断；输出放电功能；过温保护; Operating Temperature	-: -40℃~+125℃
footprint SOT-23-5_L3.0-W1.7-P0.95-LS2.8-BL
pins: 1 OUT, 2 GND, 3 ISET, 4 EN, 5 IN

## TF PUSH
designator CARD?
卡连接方式:自弹式;卡类型:MicroSD卡(TF卡);连接器类型:卡座;本体最大高度:2mm;工作温度:-25℃~+90℃;; Manufacturer: SHOU HAN(首韩); AddInBom: yes; ModelId: 2d6270e77c9a43c6bb0aca962ba811a2聨0819f05c4eef4c71ace90d822a990e87; ModelName: TF-SMD_TF-PUSH; ModelTransform: 635.826,598.424,0,0,0,0,0.002,-82.441,-23.622; Card Connection Mode: 自弹式; Connector Type: 卡座; Additional Card Detection Pins: 无; Symbol: TF PUSH; Device: TF PUSH; LCSC Part Name: 9P，自弹式TF卡座; SupplierPart: C393941; ManufacturerPart: TF PUSH; Supplier Footprint: SMD; JLCPCB Part Class: Extended Part; Datasheet: https://item.szlcsc.com/datasheet/TF%2520PUSH/372553.html; Supplier: LCSC; ConvertToPcb: yes; FootprintName: TF-SMD_TF-PUSH; Card Type: MicroSD卡(TF卡); Supplementary Features: -; Height Above Board: 2mm; Operating Temperature: -25℃~+90℃
footprint TF-SMD_TF-PUSH
pins: 1 DAT2, 2 CD/DAT3, 3 CMD, 4 VDD, 5 CLX, 6 VSS, 7 DAT0, 8 DAT1, 10, 11, 12, 13, CD

## TLV7011DCKR
designator U?
比较器数:单路;输入失调电压(Vos):500uV;输入偏置电流(Ib):5pA;轨到轨:轨到轨输入;; Manufacturer: TI(德州仪器); AddInBom: yes; ModelId: 180ad2a85d044b18a9defb4b28abe560聨0819f05c4eef4c71ace90d822a990e87; ModelName: SC-70-5_L2.0-W1.3-P0.65-LS2.1-BL; ModelTransform: 78.74,86.614,0,0,0,0,-0.002,0.001,0; Number of Channels: 单路; Vos - Input Offset Voltage: 500uV; Ib - Input Bias Current: 5pA; Propagation Delay Time: 260ns; Input Hysteresis Voltage (Vhys): 4.2mV; Common Mode Rejection Ratio(CMRR): 78dB; Output Type: 推挽; Rail to Rail: 轨到轨输入; Quiescent Current: 5uA; Maximum Power Supply Range (Vdd-Vss): 6V; Single Supply: 1.6V~5.5V; Symbol: TLV7011DCKR; Device: TLV7011DCKR; LCSC Part Name: TLV7011和TLV7021小型、微功耗、低压比较器; SupplierPart: C193688; ManufacturerPart: TLV7011DCKR; Supplier Footprint: SC-70-5; JLCPCB Part Class: Extended Part; Datasheet: https://www.ti.com/cn/lit/ds/symlink/tlv7011.pdf; Supplier: LCSC; ConvertToPcb: yes; FootprintName: SC-70-5_L2.0-W1.3-P0.65-LS2.1-BL; Output Mode: -; Operating Temperature: -40℃~+125℃; Features: -
footprint SC-70-5_L2.0-W1.3-P0.65-LS2.1-BL
pins: 1 OUT, 2 Vee, 3 IN+, 4 IN-, 5 Vcc